# Altium schematic symbol library BIBLIOTECA DE ESQUEMA.SchLib: 404 symbols (part 1 of 2)
Pins are listed as number, name and electrical type; pins without a type are passive.

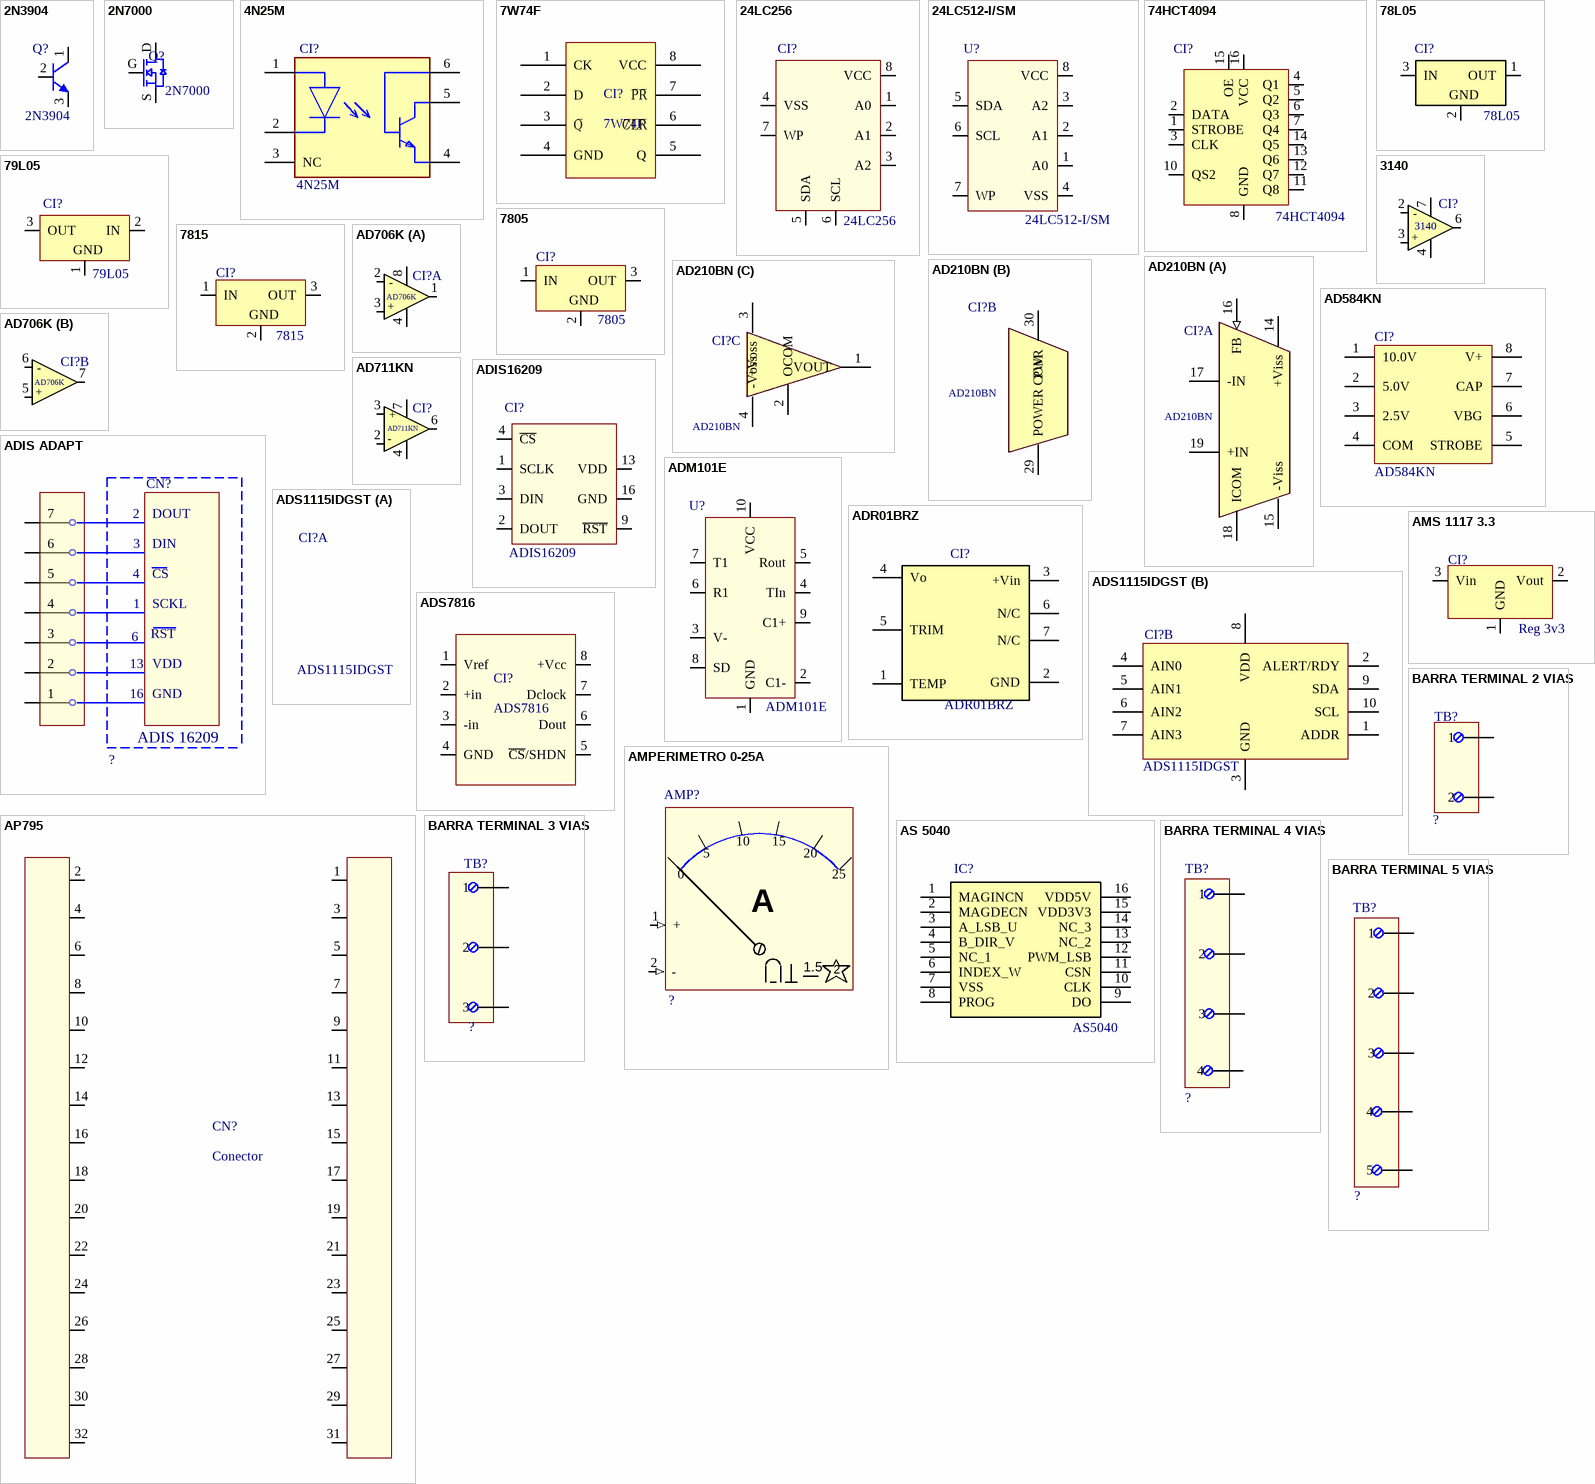
[diagram p0: symbols 2N3904 to BARRA TERMINAL 5 VIAS]

## 2N3904
designator Q?
TRANSISTOR NPN
footprint TO-92
footprint 2N7000-FET
pins: 1 C, 2 B, 3 E

## 2N7000
designator Q?
TRANSISTOR FET; Modelo: PTH
footprint TO-92 - DGS
pins: D, G, S

## 4N25M
designator CI?
ACOPLADOR OPTICO; isolador V: 7.5kV; Codigo: 512-4N25M; Value: *; Modelo: 4N25M
footprint DIP6 - 4N25M
pins: 1 A, 2 C, 3 NC, 4 E, 5 C, 6 B

## 7W74F
designator CI?
Flip Flop Tipo D
footprint 7W74F
pins: 1 CK, 2 D, 3 Q̅, 4 GND, 5 Q, 6 C̅L̅R̅, 7 P̅R̅, 8 VCC

## 24LC256
designator CI?
CMOS SERIAL EEPROM
footprint DIP8
pins: 1 A0, 2 A1, 3 A2, 4 VSS, 5 SDA, 6 SCL, 7 WP, 8 VCC

## 24LC512-I/SM
designator U?
SERIAL EEPROM 512K I2C
footprint SOIC/SOP
pins: 1 A0, 2 A1, 3 A2, 4 VSS, 5 SDA, 6 SCL, 7 WP, 8 VCC

## 74HCT4094
designator CI?
REGISTRADOR DE DESLOCAMENTO; Modelo: 74HCT4094
footprint DIP16
pins: 1 STROBE, 2 DATA, 3 CLK, 4 Q1, 5 Q2, 6 Q3, 7 Q4, 8 GND, 10 QS2, 11 Q8, 12 Q7, 13 Q6, 14 Q5, 15 OE, 16 VCC

## 78L05
designator CI?
REGULADOR DE TENSÃO LINEAR; Modelo: 78L05
footprint TO-92
pins: 1 OUT, 2 GND, 3 IN

## 79L05
designator CI?
REGULADOR DE TENSÃO LINEAR [NEGATIVO]; Modelo: 79L05
footprint 79L05
pins: 1 GND, 2 IN, 3 OUT

## 3140
designator CI?
AMPLIFICADOR OPERACIONAL
footprint DIP8
pins: 2, 3, 4, 6, 7
text: -; +

## 7805
designator CI?
Regulador de Tensão Positivo
footprint Dissipador - 7805
pins: 1 IN, 2 GND, 3 OUT

## 7815
designator CI?
Regulador de Tensão Positivo
footprint Dissipador - 7805
pins: 1 IN, 2 GND, 3 OUT

## AD210BN
designator CI?
IC OPAMP ISOLATION 1 CIRC 12DIP
footprint AD210BN
part A pins: 14 +Viss (power), 15 -Viss (power), 16 FB (in), 17 -IN (hiz), 18 ICOM, 19 +IN (hiz)
part B pins: 29 POWER COM (power), 30 PWR (power)
part C pins: 1 VOUT, 2 OCOM, 3 +Voss (power), 4 -Voss (power)

## AD584KN
designator CI?
REFERENCIA DE TENSÃO; Modelo: AD584KN
footprint DIP8
pins: 1 10.0V, 2 5.0V, 3 2.5V, 4 COM, 5 STROBE, 6 VBG, 7 CAP, 8 V+ (power)

## AD706K
designator CI?
AMPLIFICADOR OPERACIONAL
footprint DIP8
footprint SOIC 8
part A pins: 1, 2, 3, 4, 8
part B pins: 5, 6, 7
part A text: -; +
part B text: -; +

## AD711KN
designator CI?
AMPLIFICADOR OPERACIONAL
footprint DIP8
footprint SOIC 8
pins: 2, 3, 4, 6, 7
text: +; -

## ADIS16209
designator CI?
Inclinômetro
pins: 1 SCLK, 2 DOUT, 3 DIN, 4 ~{CS}, 9 ~{RST}, 13 VDD, 16 GND

## ADIS ADAPT
designator CN?, comment ?
PLACA DE ADAPTAÇÃO ?
pins: 1, 2, 3, 4, 5, 6, 7
text: DOUT; DIN; CS; SCKL; 9; RST; 13; VDD; 16; GND; ADIS 16209

## ADM101E
designator U?
TRANSCEIVER FOR PORTABLE
footprint MSOP-10
pins: 1 GND, 2 C1-, 3 V-, 4 TIn, 5 Rout, 6 R1, 7 T1, 8 SD, 9 C1+, 10 VCC

## ADR01BRZ
designator CI?
pins: 1 TEMP, 2 GND, 3 +Vin, 4 Vo, 5 TRIM, 6 N/C, 7 N/C

## ADS1115IDGST
designator CI?
MODULO ADS
part B pins: 1 ADDR, 2 ALERT/RDY, 3 GND, 4 AIN0, 5 AIN1, 6 AIN2, 7 AIN3, 8 VDD, 9 SDA, 10 SCL

## ADS7816
designator CI?
Conversor Analógico Digital
footprint DIP8
pins: 1 Vref, 2 +in, 3 -in, 4 GND, 5 ~{CS}/SHDN, 6 Dout, 7 Dclock, 8 +Vcc

## AMPERIMETRO 0-25A
designator AMP?, comment ?
AMPERIMETRO
pins: 1 + (in), 2 - (in)
text: 10; 15; 5; 20; 0; 25; A; 1.5

## AMS 1117 3.3
designator CI?, comment Reg 3v3
Regulador de tensão 3.3 Volts
footprint SOT223
pins: 1 GND, 2 Vout, 3 Vin

## AP795
designator CN?, comment Conector
Pinos LF4710
footprint AP795
pins: 1, 2, 3, 4, 5, 6, 7, 8, 9, 10, 11, 12, 13, 14, 15, 16, 17, 18, 19, 20, 21, 22, 23, 24, 25, 26, 27, 28, 29, 30, 31, 32

## AS 5040
designator IC?, comment AS5040
SENSOR MAGNETICO DE POSIÇÃO ROTACIONAL; Modelo: AS5040
pins: 1 MAGINCN, 2 MAGDECN, 3 A_LSB_U, 4 B_DIR_V, 5 NC_1, 6 INDEX_W, 7 VSS, 8 PROG, 9 DO, 10 CLK, 11 CSN, 12 PWM_LSB, 13 NC_2, 14 NC_3, 15 VDD3V3, 16 VDD5V

## BARRA TERMINAL 2 VIAS
designator TB?, comment ?
CONECTOR
pins: 1, 2

## BARRA TERMINAL 3 VIAS
designator ?, comment TB?
CONECTOR
pins: 1, 2, 3

## BARRA TERMINAL 4 VIAS
designator TB?, comment ?
CONECTOR
pins: 1, 2, 4 3, 4

## BARRA TERMINAL 5 VIAS
designator TB?, comment ?
CONECTOR
pins: 1, 2, 4 3, 4, 5

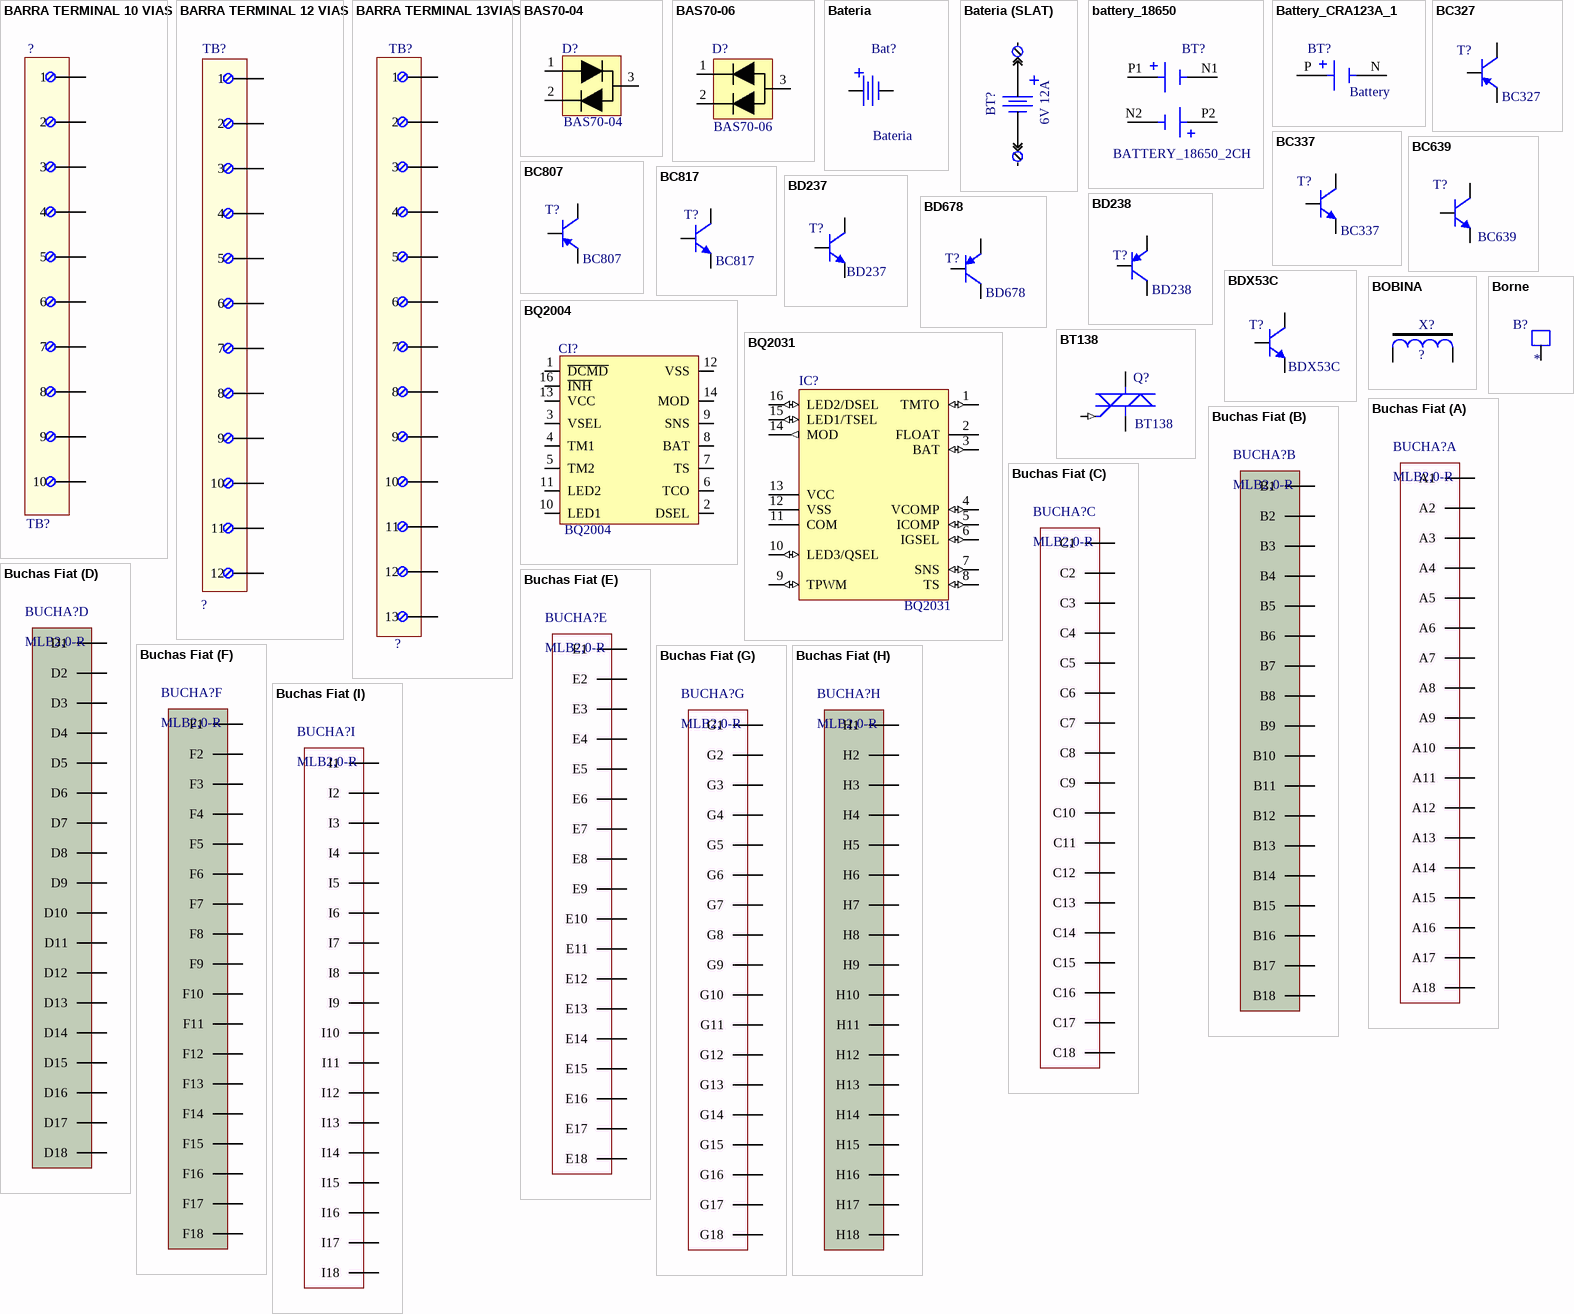
[diagram p1: symbols BARRA TERMINAL 10 VIAS to Buchas Fiat]

## BARRA TERMINAL 10 VIAS
designator TB?, comment ?
CONECTOR
pins: 1, 2, 3, 4, 5, 6, 7, 8, 9, 10

## BARRA TERMINAL 12 VIAS
designator TB?, comment ?
CONECTOR
pins: 1, 2, 3, 4, 5, 6, 7, 8, 9, 10, 11, 12

## BARRA TERMINAL 13VIAS
designator TB?, comment ?
CONECTOR
pins: 1, 2, 3, 4, 5, 6, 7, 8, 9, 10, 11, 12, 13

## BAS70-04
designator D?
DIODO SCHOTTKY [  COMUTAÇÃO RAPIDA DE DUPLA JUNÇÃO ]; Modelo: SMD BAS70-04; ENCAP: SOT-23
footprint SOT-23 (1N4148SMD/MMBD4148-TP/1N4148 SE)
footprint SOT-23 (RED PAD)
pins: 1, 2, 3

## BAS70-06
designator D?
DIODO SCHOTTKY [ COMUTAÇÃO RAPIDA]; Modelo: SMD BAS70-06; ENCAP: SOT-23
footprint SOT-23 (1N4148SMD/MMBD4148-TP/1N4148 SE)
footprint SOT-23 - 5 (RED PAD)
pins: 1, 2, 3

## Bateria
designator Bat?
footprint Soquet Bat
pins: 1 +, 2 -

## Bateria (SLAT)
designator BT?, comment 6V 12A
BATERIA
pins: 1 +, 2 -

## battery_18650
designator BT?, comment BATTERY_18650_2CH
footprint battery_18650_2ch
pins: N1, N2, P1, P2

## Battery_CRA123A_1
designator BT?, comment Battery
footprint Battery_cr123a_1
pins: N NEG, P POS

## BC327
designator T?
TRANSISTOR PNP
footprint TO-92
pins: 1 C, 2 B, 3 E

## BC337
designator T?
TRANSISTOR NPN
footprint TO-92
pins: 1 C, 2 B, 3 E

## BC639
designator T?
TRANSISTOR NPN
footprint TO-92
pins: 1 E, 2 C, 3 B

## BC807
designator T?
TRANSISTOR PNP; Modelo: SMD
footprint SOT-23
pins: 1 B, 2 E, 3 C

## BC817
designator T?
TRANSISTOR NPN; Modelo: SMD
footprint SOT-23
pins: 1 B, 2 E, 3 C

## BD237
designator T?
TRANSISTOR NPN; Modelo: PTH
footprint TO-225AA
pins: B, C, E

## BD238
designator T?
TRANSISTOR PNP; Modelo: PTH
footprint TO-126
pins: B, C, E

## BD678
designator T?
TRANSISTOR PNP; Modelo: PTH
footprint TO-126
pins: B, C, E

## BDX53C
designator T?
TRANSISTOR NPN; Modelo: PTH
footprint BDX53C
pins: B, C, E

## BOBINA
designator X?, comment ?
AJUDA
pins: 1, 2

## Borne
designator B?
CONECTOR
pins: 1

## BQ2004
designator CI?
Circuito Integrado
footprint SOIC NARROW
pins: 1 ~{DCMD}, 2 DSEL, 3 VSEL, 4 TM1, 5 TM2, 6 TCO, 7 TS, 8 BAT, 9 SNS, 10 LED1, 11 LED2, 12 VSS, 13 VCC, 14 MOD, 16 ~{INH}

## BQ2031
designator IC?
CONTROLADOR DE GERENCIAMENTO DE BATERIA; Modelo: BQ2031
footprint SOIC NARROW
pins: 1 TMTO (io) "This input sets the maximum charge time.The resistor and capacitor values are determined using equation 6. Figure 9 shows the resistor/capacitor connection.", 2 FLOAT (oc) "This open-drain output uses an external resistor divider network to control the BAT input voltage threshold (VFLT) for the float charge regulation. See Figure 1.", 3 BAT (io) "BAT is the battery voltage sense input. This potential is generally developed using a highimpedance resistor divider network connected between the positive and the negative terminals of the battery. See Figure 6 and equation (See Datasheet)", 4 VCOMP (io) "This input uses an external C or R-C network for voltage loop stability.", 5 ICOMP (io) "This input uses an external C or R-C network for current loop stability.", 6 IGSEL (io) "This three-state input is used to set IMIN for fast charge termination in the Two-Step Voltage algorithm and for maintenance current regulation in the Two-Step Current algorithm.See Tables 3 and 4.", 7 SNS (io) "Battery current is sensed via the voltage developed on this pin by an external sense resistor,RSNS, connected in series with the low side of the battery. See equation 8.", 8 TS (io) "This input is for an external battery temperature monitoring thermistor or probe. An external resistor divider network sets the lower and upper temperature thresholds.See Figures 7 and 8 and equations 4 and 5.", 9 TPWM (io) "This input uses an external timing capacitor to ground the pulse-width modulation (PWM) frequency. See equation 9.", 10 LED3/QSEL (io) "These charger status output drivers are for the direct drive of the LED display. Display modes are shown in Table 2. These outputs are tri-stated during initialization so that QSEL,TSEL, and DSEL can be read./With QSEL, (See Datasheet)", 11 COM (hiz) "Common output for LED1-3. This output is in a high-impedance state during initialization to read program inputs on TSEL,QSEL, and DSEL.", 12 VSS (power) "Ground", 13 VCC (power) "5.0V, +/- 10% power", 14 MOD (out) "MOD is a pulse-width modulated push/pull output that is used to control the charging current to the battery. MOD switches high to enable current flow and low to inhibit current flow.", 15 LED1/TSEL (io) "These charger status output drivers are for the direct drive of the LED display. Display modes are shown in Table 2. These outputs are tri-stated during initialization so that QSEL,TSEL, and DSEL can be read./With TSEL, (See Datasheet)", 16 LED2/DSEL (io) "These charger status output drivers are for the direct drive of the LED display. Display modes are shown in Table 2. These outputs are tri-stated during initialization so that QSEL,TSEL, and DSEL can be read./This (See Datasheet)"

## BT138
designator Q?
TRIAC; Modelo: BT138 600E
footprint TO-220-3 Deit
pins: 1 MT1, 2 MT2, 3 GATE (in)

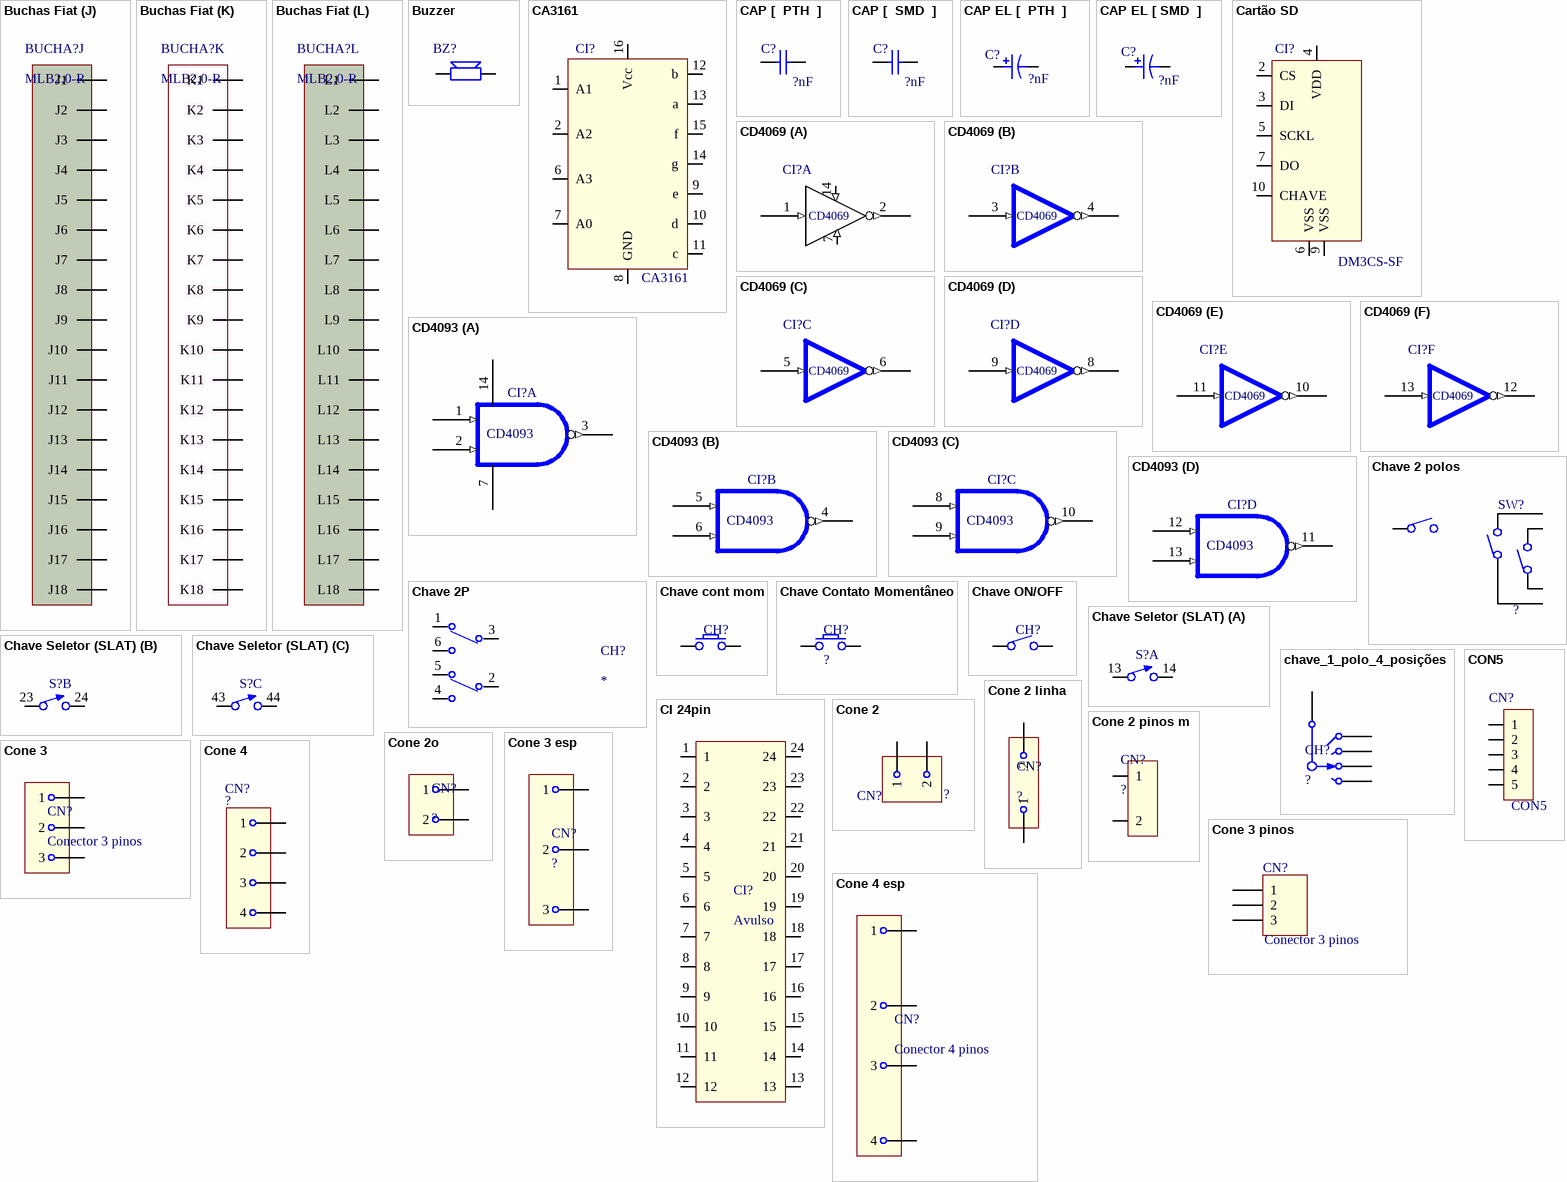
[diagram p2: symbols Buchas Fiat to Cone 4 esp]

## Buchas Fiat
designator BUCHA?, comment MLB2,0-R
CONECTOR
part A pins: A1, A2, A3, A4, A5, A6, A7, A8, A9, A10, A11, A12, A13, A14, A15, A16, A17, A18
part B pins: B1, B2, B3, B4, B5, B6, B7, B8, B9, B10, B11, B12, B13, B14, B15, B16, B17, B18
part C pins: C1, C2, C3, C4, C5, C6, C7, C8, C9, C10, C11, C12, C13, C14, C15, C16, C17, C18
part D pins: D1, D2, D3, D4, D5, D6, D7, D8, D9, D10, D11, D12, D13, D14, D15, D16, D17, D18
part E pins: E1, E2, E3, E4, E5, E6, E7, E8, E9, E10, E11, E12, E13, E14, E15, E16, E17, E18
part F pins: F1, F2, F3, F4, F5, F6, F7, F8, F9, F10, F11, F12, F13, F14, F15, F16, F17, F18
part G pins: G1, G2, G3, G4, G5, G6, G7, G8, G9, G10, G11, G12, G13, G14, G15, G16, G17, G18
part H pins: H1, H2, H3, H4, H5, H6, H7, H8, H9, H10, H11, H12, H13, H14, H15, H16, H17, H18
part I pins: I1, I2, I3, I4, I5, I6, I7, I8, I9, I10, I11, I12, I13, I14, I15, I16, I17, I18
part J pins: J1, J2, J3, J4, J5, J6, J7, J8, J9, J10, J11, J12, J13, J14, J15, J16, J17, J18
part K pins: K1, K2, K3, K4, K5, K6, K7, K8, K9, K10, K11, K12, K13, K14, K15, K16, K17, K18
part L pins: L1, L2, L3, L4, L5, L6, L7, L8, L9, L10, L11, L12, L13, L14, L15, L16, L17, L18

## Buzzer
designator BZ?, comment ?  (value not drawn)
Buzina
footprint Buzzer SM 5V C (Digilectron)
pins: 1, 2

## CA3161
designator CI?
DECODIFICADOR DE 7 SEGMENTOS
footprint DIP16
pins: 1 A1, 2 A2, 6 A3, 7 A0, 8 GND, 9 e, 10 d, 11 c, 12 b, 13 a, 14 g, 15 f, 16 Vcc

## CAP [  PTH  ]
designator C?, comment value ?nF  (hidden comment: ?nF-50V)
CAPACITOR CERÂMICO                                                                                                                                                                                      CAPACITOR POLIESTER                                                                                        CAPACITOR POLIESTER CANECO; Modelo: PTH; Volts: 50V
footprint CAP CERAM 27MM L20
footprint CAP Poli Caneca 0.1uF
footprint CAP POLI 27MM L23 [ DEITADO ]
footprint CAP POLI 26.3MM L10
footprint CAP POLI 22.8MM L17
footprint CAP POLI 10.5MM L9.5
footprint Cap Poli 5.08MM L5.5
footprint Cap poli 5.08MM L7.5
footprint CAP CERAM 27MM L20
footprint CAP CERAM 15.5MM L12
footprint CAP CERAM 15MM L17.8
footprint CAP CERAM 10MM L10
footprint CAP CERAM 5.08MM L8
footprint CAP CERAM 5.08MM L7.7
pins: A, B

## CAP [  SMD  ]
designator C?, comment value ?nF  (hidden comment: ?nF-50V)
CAPACITOR CERÂMICO                                                                                                                                                                                      CAPACITOR POLIESTER                                                                                        CAPACITOR POLIESTER CANECO; Modelo: SMD; Volts: 50V
footprint CAP 2512
footprint CAP 1206
footprint CAP 0805
pins: 1 A, 2 B

## CAP EL [  PTH  ]
designator C?, comment value ?nF  (hidden comment: ?nF-50V)
CAPACITOR ELETROLÍTICO; Volts: 50V; Modelo: PTH
footprint CAP EL 2mm L10 D6
footprint CAP EL 2mm L11.5 D5
footprint Cap El 3mm L15 D7
footprint CAP EL 3mm L15 D8
footprint CAP EL 4mm L14.5 D8
footprint CAP EL 4mm L14.5 D10
footprint CAP EL 5mm L10 D10
footprint CAP EL 5mm L20 D12
footprint CAP EL 5mm L20  D12 - DEITADO
footprint CAP EL 7MM L25.5 D17
footprint CAP EL 7.5MM L35 D18
pins: 1, 2

## CAP EL [ SMD  ]
designator C?, comment value ?nF  (hidden comment: ?nF-50V)
CAPACITOR ELETROLÍTICO; Modelo: SMD *; Volts: 50V; ENCAP: *
footprint CAP EL SMD 12.5MM L16.5 D16
footprint CAP EL SMD 5.8MM D6.3
footprint CAP EL SMD  5.5MM L6.2 D8
footprint CAP EL SMD 5MM L5.5 D6
footprint CAP EL SMD 4.5MM L7.7 D6.3
footprint CAP EL SMD 4MM L5.8 D4
footprint CAP EL SMD 12.7mm D10
pins: 1, 2

## Cartão SD
designator CI?, comment DM3CS-SF
Soquete para cartão MicroSD DM3CS-SF
pins: 2 CS, 3 DI, 4 VDD, 5 SCKL, 6 VSS, 7 DO, 9 VSS, 10 CHAVE

## CD4069
designator CI?
HEX INVERTER CMOS; Modelo: CD4069
footprint DIP14
part A pins: 1 I (in), 2 O (out), 7 I (in), 14 I (in)
part B pins: 3 I (in), 4 O (out)
part C pins: 5 I (in), 6 O (out)
part D pins: 8 O (out), 9 I (in)
part E pins: 10 O (out), 11 I (in)
part F pins: 12 O (out), 13 I (in)

## CD4093
designator CI?
INVERSOSR LOGICO; Modelo: CD4093
footprint DIP14
part A pins: 1 I0 (in), 2 I1 (in), 3 O (out), 7 GND (power), 14 VDD (power)
part B pins: 4 O (out), 5 I0 (in), 6 I1 (in)
part C pins: 8 I0 (in), 9 I1 (in), 10 O (out)
part D pins: 11 O (out), 12 I0 (in), 13 I1 (in)

## Chave 2 polos
designator SW?, comment ?
AJUDA
pins: 1, 1, 2, 2

## Chave 2P
designator CH?
AJUDA
pins: 1, 2, 3, 4, 5, 6

## Chave cont mom
designator CH?, comment Chave  (value not drawn)
Chave de contato momentâneo
footprint Chave 3FTL6
pins: 1, 2

## Chave Contato Momentâneo
designator CH?, comment ?
Chave
footprint Chave p/ DI121264
pins: 1, 2

## Chave ON/OFF
designator CH?, comment ?  (value not drawn)
Chave ON/OFF
pins: 1, 2

## Chave Seletor (SLAT)
designator S?  (value not drawn)
AJUDA
part A pins: 13, 14
part B pins: 23, 24
part C pins: 43, 44

## chave_1_polo_4_posições
designator CH?, comment ?
AJUDA
pins: 0, 1, 2, 3, C

## CI 24pin
designator CI?, comment Avulso
AJUDA
pins: 1, 2, 3, 4, 5, 6, 7, 8, 9, 10, 11, 12, 13, 14, 15, 16, 17, 18, 19, 20, 21, 22, 23, 24

## CON5
designator CN?
CONECTOR
pins: 1, 2, 3, 4, 5

## Cone 2
designator CN?, comment ?
CONECTOR
footprint Cone MCV1.5-3.81 2P 180ï¿½
pins: 1, 2

## Cone 2 linha
designator CN?, comment ?
CONECTOR
pins: 1, 2

## Cone 2 pinos m
designator CN?, comment ?
CONECTOR
pins: 1, 2

## Cone 2o
designator CN?, comment ?
CONECTOR
pins: 1, 2

## Cone 3
designator CN?, comment Conector 3 pinos
CONECTOR
pins: 1, 2, 3

## Cone 3 esp
designator CN?, comment ?
CONECTOR
pins: 1, 2, 3

## Cone 3 pinos
designator CN?, comment Conector 3 pinos
CONECTOR
pins: 1, 2, 3

## Cone 4
designator CN?, comment ?
CONECTOR
pins: 1, 2, 3, 4

## Cone 4 esp
designator CN?, comment Conector 4 pinos
CONECTOR
pins: 1, 2, 3, 4

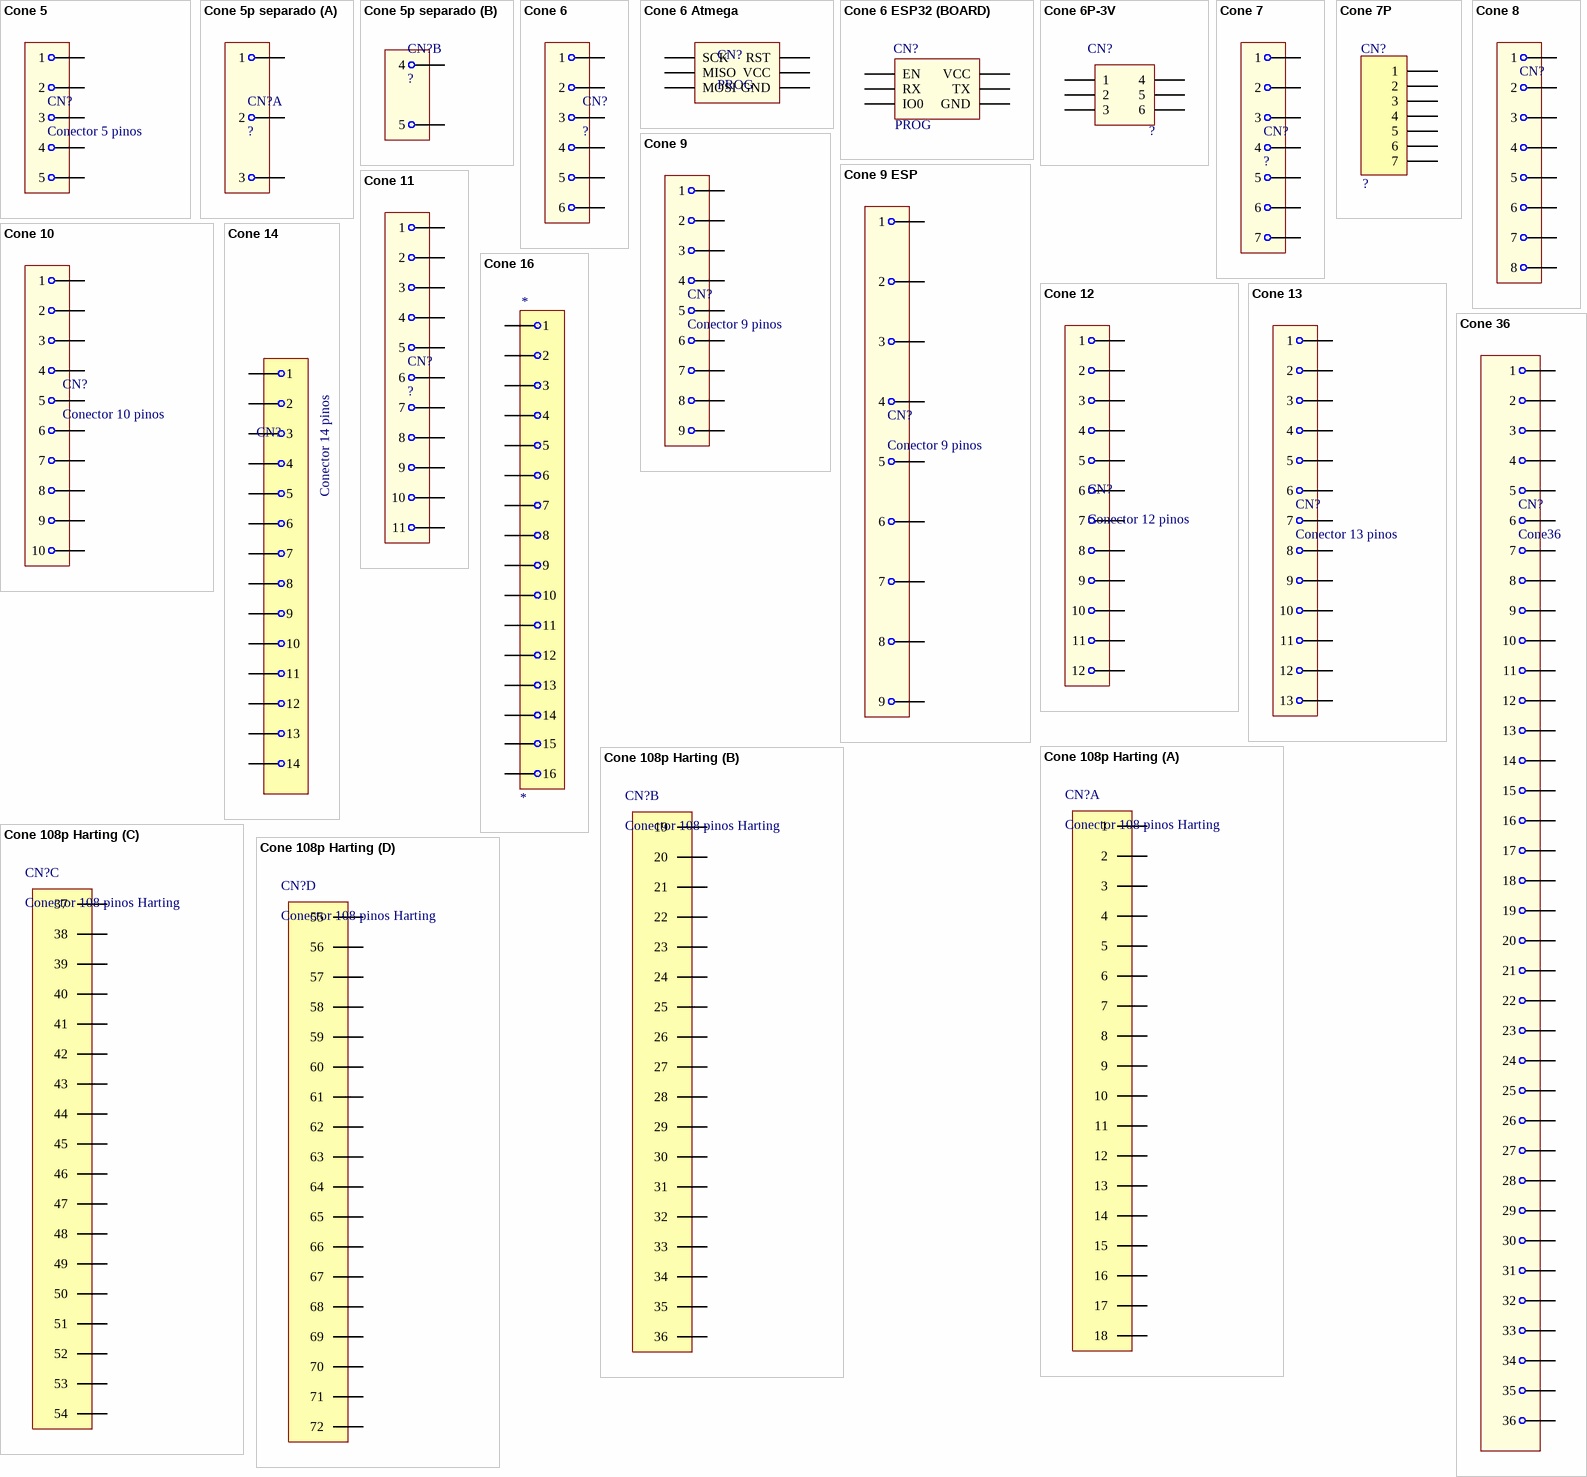
[diagram p3: symbols Cone 5 to Cone 108p Harting]

## Cone 5
designator CN?, comment Conector 5 pinos
CONECTOR
pins: 1, 2, 3, 4, 5

## Cone 5p separado
designator CN?, comment ?
CONECTOR
part A pins: 1, 2, 3
part B pins: 4, 5

## Cone 6
designator CN?, comment ?
CONECTOR
pins: 1, 2, 3, 4, 5, 6

## Cone 6 Atmega
designator CN?, comment PROG
Pinos de Programação ATMEGA
footprint Barra Prog Atmega
pins: GND, MISO, MOSI, RST, SCK, VCC

## Cone 6 ESP32 (BOARD)
designator CN?, comment PROG
Pinos de Programação ESP32
footprint Barra Prog ESP32 (BOARD)
pins: EN, GND, IO0, RX, TX, VCC

## Cone 6P-3V
designator CN?, comment ?
CONECTOR
pins: 1, 2, 3, 4, 5, 6

## Cone 7
designator CN?, comment ?
CONECTOR
pins: 1, 2, 3, 4, 5, 6, 7

## Cone 7P
designator CN?, comment ?
CONECTOR
pins: 1, 2, 3, 4, 5, 6, 7

## Cone 8
designator CN?, comment ?  (value not drawn)
CONECTOR
footprint Barra 8 Pinos
pins: 1, 2, 3, 4, 5, 6, 7, 8

## Cone 9
designator CN?, comment Conector 9 pinos
CONECTOR
pins: 1, 2, 3, 4, 5, 6, 7, 8, 9

## Cone 9 ESP
designator CN?, comment Conector 9 pinos
CONECTOR
pins: 1, 2, 3, 4, 5, 6, 7, 8, 9

## Cone 10
designator CN?, comment Conector 10 pinos
CONECTOR
pins: 1, 2, 3, 4, 5, 6, 7, 8, 9, 10

## Cone 11
designator CN?, comment ?
CONECTOR
pins: 1, 2, 3, 4, 5, 6, 7, 8, 9, 10, 11

## Cone 12
designator CN?, comment Conector 12 pinos
CONECTOR
pins: 1, 2, 3, 4, 5, 6, 7, 8, 9, 10, 11, 12

## Cone 13
designator CN?, comment Conector 13 pinos
CONECTOR
pins: 1, 2, 3, 4, 5, 6, 7, 8, 9, 10, 11, 12, 13

## Cone 14
designator CN?, comment Conector 14 pinos
CONECTOR
pins: 1, 2, 3, 4, 5, 6, 7, 8, 9, 10, 11, 12, 13, 14

## Cone 16
designator *
CONECTOR
pins: 1, 2, 3, 4, 5, 6, 7, 8, 9, 10, 11, 12, 13, 14, 15, 16

## Cone 36
designator CN?, comment Cone36
CONECTOR
pins: 1, 2, 3, 4, 5, 6, 7, 8, 9, 10, 11, 12, 13, 14, 15, 16, 17, 18, 19, 20, 21, 22, 23, 24, 25, 26, 27, 28, 29, 30, 31, 32, 33, 34, 35, 36

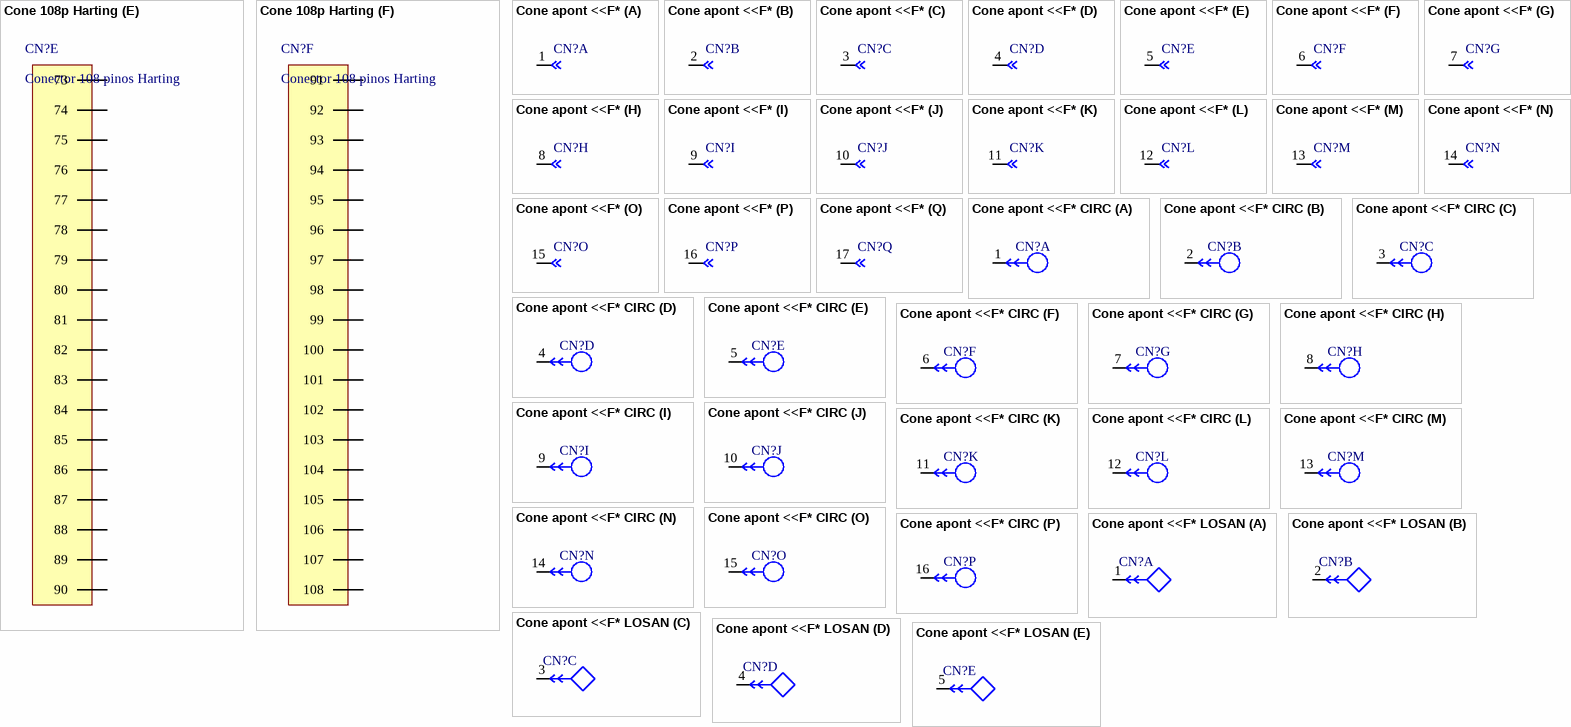
[diagram p4: symbols Cone 108p Harting to Cone apont <<F* LOSAN]

## Cone 108p Harting
designator CN?, comment Conector 108 pinos Harting
CONECTOR
part A pins: 1, 2, 3, 4, 5, 6, 7, 8, 9, 10, 11, 12, 13, 14, 15, 16, 17, 18
part B pins: 19, 20, 21, 22, 23, 24, 25, 26, 27, 28, 29, 30, 31, 32, 33, 34, 35, 36
part C pins: 37, 38, 39, 40, 41, 42, 43, 44, 45, 46, 47, 48, 49, 50, 51, 52, 53, 54
part D pins: 55, 56, 57, 58, 59, 60, 61, 62, 63, 64, 65, 66, 67, 68, 69, 70, 71, 72
part E pins: 73, 74, 75, 76, 77, 78, 79, 80, 81, 82, 83, 84, 85, 86, 87, 88, 89, 90
part F pins: 91, 92, 93, 94, 95, 96, 97, 98, 99, 100, 101, 102, 103, 104, 105, 106, 107, 108

## Cone apont <<F*
designator CN?, comment Conector  (value not drawn)
part A pins: 1
part B pins: 2
part C pins: 3
part D pins: 4
part E pins: 5
part F pins: 6
part G pins: 7
part H pins: 8
part I pins: 9
part J pins: 10
part K pins: 11
part L pins: 12
part M pins: 13
part N pins: 14
part O pins: 15
part P pins: 16
part Q pins: 17

## Cone apont <<F* CIRC
designator CN?, comment Conector  (value not drawn)
part A pins: 1
part B pins: 2
part C pins: 3
part D pins: 4
part E pins: 5
part F pins: 6
part G pins: 7
part H pins: 8
part I pins: 9
part J pins: 10
part K pins: 11
part L pins: 12
part M pins: 13
part N pins: 14
part O pins: 15
part P pins: 16

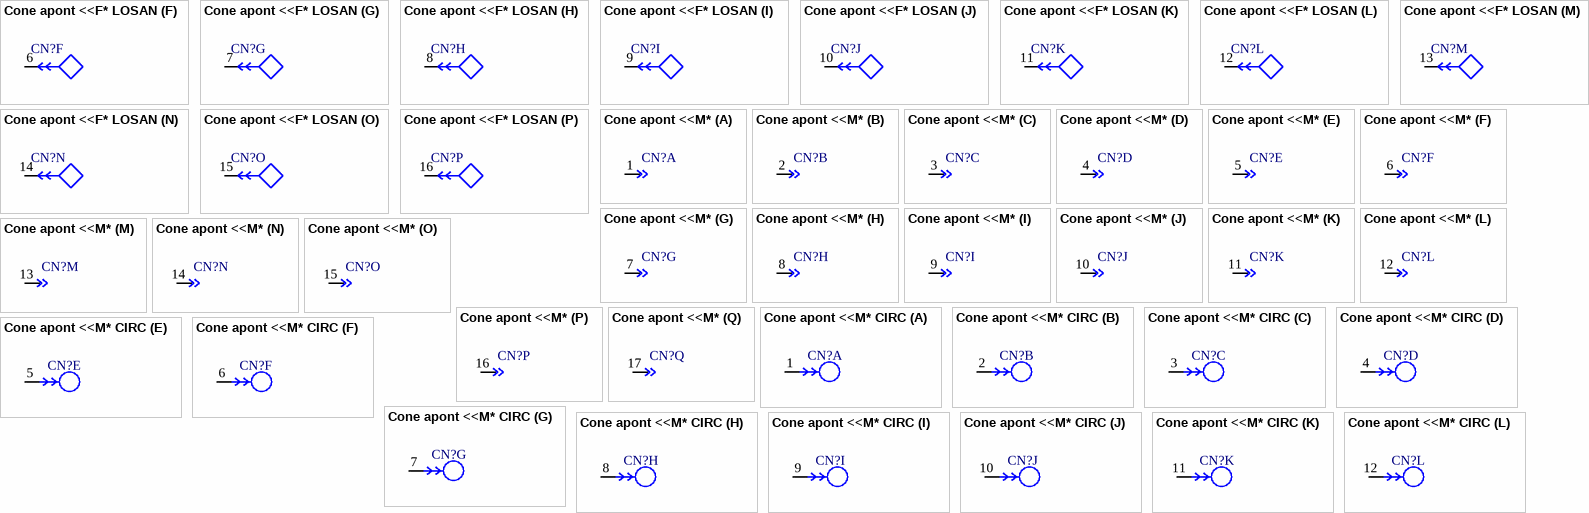
[diagram p5: symbols Cone apont <<F* LOSAN to Cone apont <<M* CIRC]

## Cone apont <<F* LOSAN
designator CN?, comment Conector  (value not drawn)
part A pins: 1
part B pins: 2
part C pins: 3
part D pins: 4
part E pins: 5
part F pins: 6
part G pins: 7
part H pins: 8
part I pins: 9
part J pins: 10
part K pins: 11
part L pins: 12
part M pins: 13
part N pins: 14
part O pins: 15
part P pins: 16

## Cone apont <<M*
designator CN?, comment Conector  (value not drawn)
part A pins: 1
part B pins: 2
part C pins: 3
part D pins: 4
part E pins: 5
part F pins: 6
part G pins: 7
part H pins: 8
part I pins: 9
part J pins: 10
part K pins: 11
part L pins: 12
part M pins: 13
part N pins: 14
part O pins: 15
part P pins: 16
part Q pins: 17

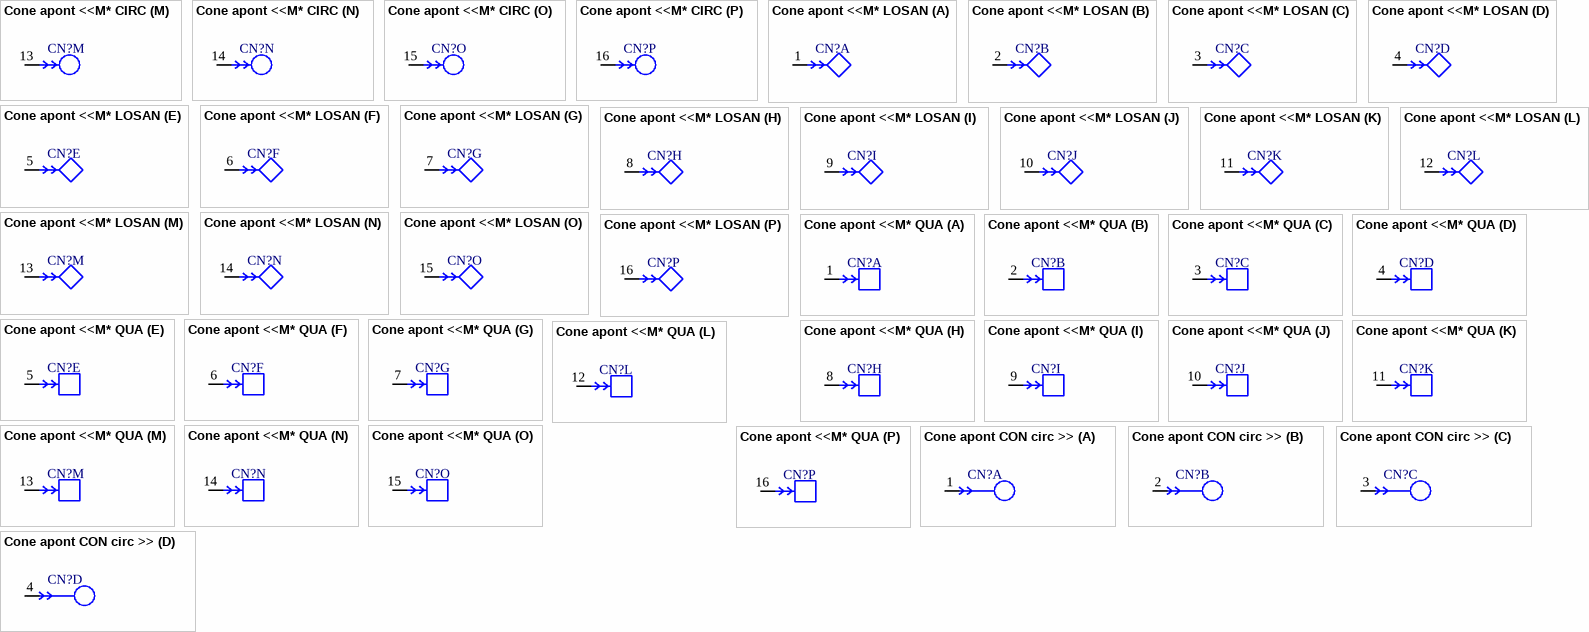
[diagram p6: symbols Cone apont <<M* CIRC to Cone apont CON circ >>]

## Cone apont <<M* CIRC
designator CN?, comment Conector  (value not drawn)
part A pins: 1
part B pins: 2
part C pins: 3
part D pins: 4
part E pins: 5
part F pins: 6
part G pins: 7
part H pins: 8
part I pins: 9
part J pins: 10
part K pins: 11
part L pins: 12
part M pins: 13
part N pins: 14
part O pins: 15
part P pins: 16

## Cone apont <<M* LOSAN
designator CN?, comment Conector  (value not drawn)
part A pins: 1
part B pins: 2
part C pins: 3
part D pins: 4
part E pins: 5
part F pins: 6
part G pins: 7
part H pins: 8
part I pins: 9
part J pins: 10
part K pins: 11
part L pins: 12
part M pins: 13
part N pins: 14
part O pins: 15
part P pins: 16

## Cone apont <<M* QUA
designator CN?, comment Conector  (value not drawn)
part A pins: 1
part B pins: 2
part C pins: 3
part D pins: 4
part E pins: 5
part F pins: 6
part G pins: 7
part H pins: 8
part I pins: 9
part J pins: 10
part K pins: 11
part L pins: 12
part M pins: 13
part N pins: 14
part O pins: 15
part P pins: 16

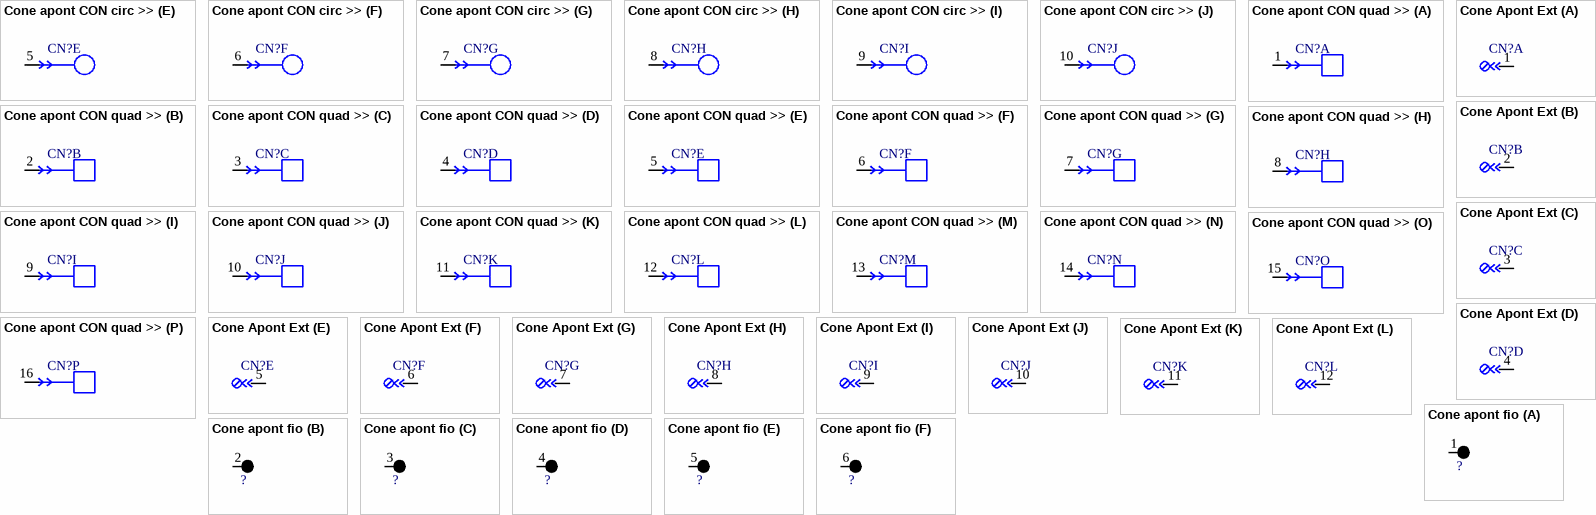
[diagram p7: symbols Cone apont CON circ >> to Cone apont fio]

## Cone apont CON circ >>
designator CN?, comment Conector  (value not drawn)
part A pins: 1
part B pins: 2
part C pins: 3
part D pins: 4
part E pins: 5
part F pins: 6
part G pins: 7
part H pins: 8
part I pins: 9
part J pins: 10

## Cone apont CON quad >>
designator CN?, comment Conector  (value not drawn)
part A pins: 1
part B pins: 2
part C pins: 3
part D pins: 4
part E pins: 5
part F pins: 6
part G pins: 7
part H pins: 8
part I pins: 9
part J pins: 10
part K pins: 11
part L pins: 12
part M pins: 13
part N pins: 14
part O pins: 15
part P pins: 16

## Cone Apont Ext
designator CN?
CONECTOR
part A pins: 1 A
part B pins: 2 B
part C pins: 3 C
part D pins: 4 D
part E pins: 5 E
part F pins: 6 F
part G pins: 7 G
part H pins: 8 H
part I pins: 9 I
part J pins: 10 J
part K pins: 11 K
part L pins: 12 L

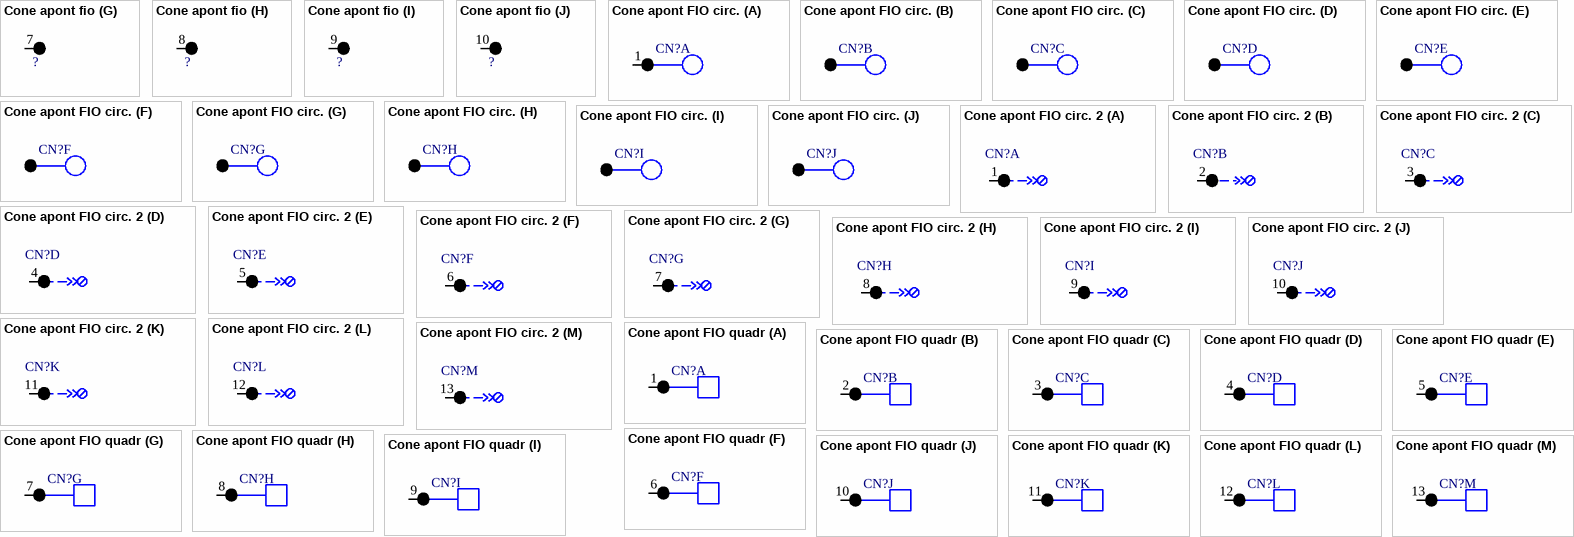
[diagram p8: symbols Cone apont fio to Cone apont FIO quadr]

## Cone apont fio
designator Alimentação, comment ?
CONECTOR
part A pins: 1
part B pins: 2
part C pins: 3
part D pins: 4
part E pins: 5
part F pins: 6
part G pins: 7
part H pins: 8
part I pins: 9
part J pins: 10

## Cone apont FIO circ.
designator CN?, comment Conector  (value not drawn)
part A pins: 1, 2, 3, 4, 5, 6, 7, 8, 9, 10

## Cone apont FIO circ. 2
designator CN?, comment Conector  (value not drawn)
part A pins: 1
part B pins: 2
part C pins: 3
part D pins: 4
part E pins: 5
part F pins: 6
part G pins: 7
part H pins: 8
part I pins: 9
part J pins: 10
part K pins: 11
part L pins: 12
part M pins: 13

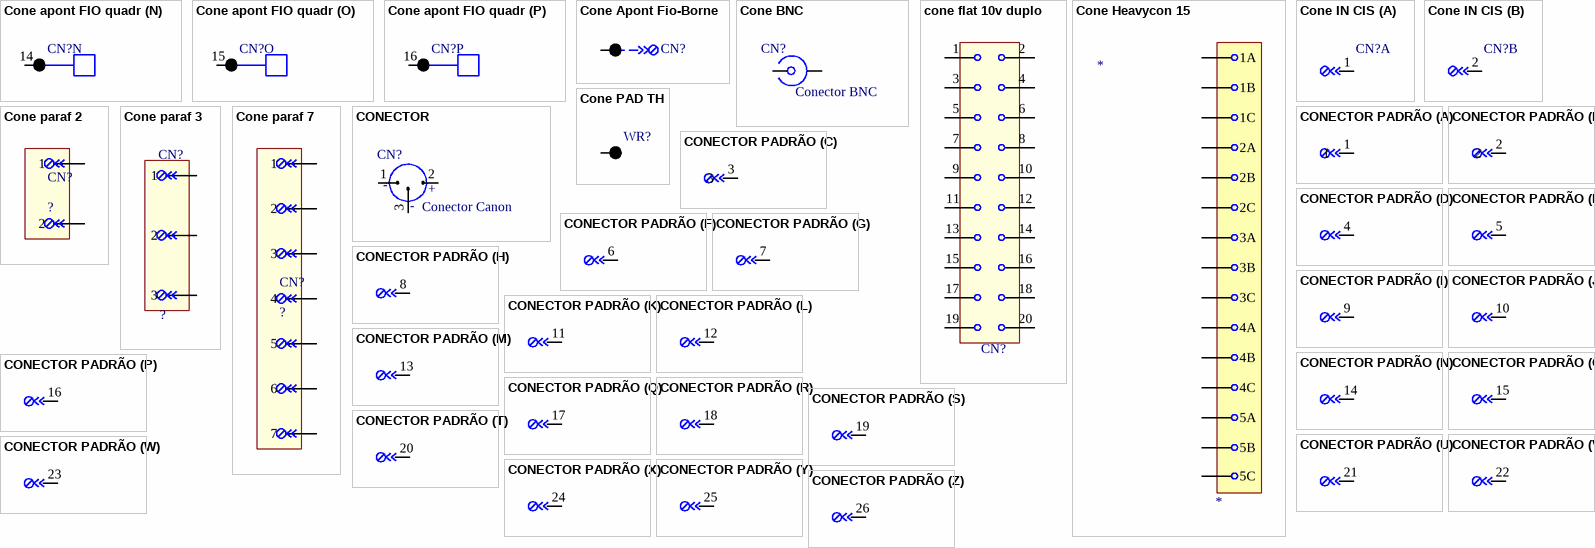
[diagram p9: symbols Cone apont FIO quadr to CONECTOR PADRÃO]

## Cone apont FIO quadr
designator CN?, comment Conector  (value not drawn)
part A pins: 1
part B pins: 2
part C pins: 3
part D pins: 4
part E pins: 5
part F pins: 6
part G pins: 7
part H pins: 8
part I pins: 9
part J pins: 10
part K pins: 11
part L pins: 12
part M pins: 13
part N pins: 14
part O pins: 15
part P pins: 16

## Cone Apont Fio-Borne
designator CN?  (value not drawn)
CONECTOR
pins: 1

## Cone BNC
designator CN?, comment Conector BNC
CONECTOR
pins: 1, 2

## cone flat 10v duplo
designator 1A, comment CN?
CONECTOR
pins: 1 1B, 2 1A, 3 2B, 4 2A, 5 3B, 6 3A, 7 4B, 8 4A, 9 5B, 10 5A, 11 6B, 12 6A, 13 7B, 14 7A, 15 8B, 16 8A, 17 9B, 18 9A, 19 10B, 20 10A

## Cone Heavycon 15
designator *
CONECTOR
pins: 1 1A, 2 1B, 3 1C, 4 2A, 5 2B, 6 2C, 7 3A, 8 3B, 9 3C, 10 4A, 11 4B, 12 4C, 13 5A, 14 5B, 15 5C

## Cone IN CIS
designator CN?  (value not drawn)
CONECTOR
footprint Cone IN CIS
part A pins: 1
part B pins: 2

## Cone PAD TH
designator WR?, comment Color  (value not drawn)
CONECTOR
pins: 1

## Cone paraf 2
designator CN?, comment ?
CONECTOR
pins: 1, 2

## Cone paraf 3
designator CN?, comment ?
CONECTOR
pins: 1, 2, 3

## Cone paraf 7
designator CN?, comment ?
CONECTOR
pins: 1, 2, 3, 4, 5, 6, 7

## CONECTOR
designator CN?, comment Conector Canon
Canon
pins: 1, 2, 3
text: -; +

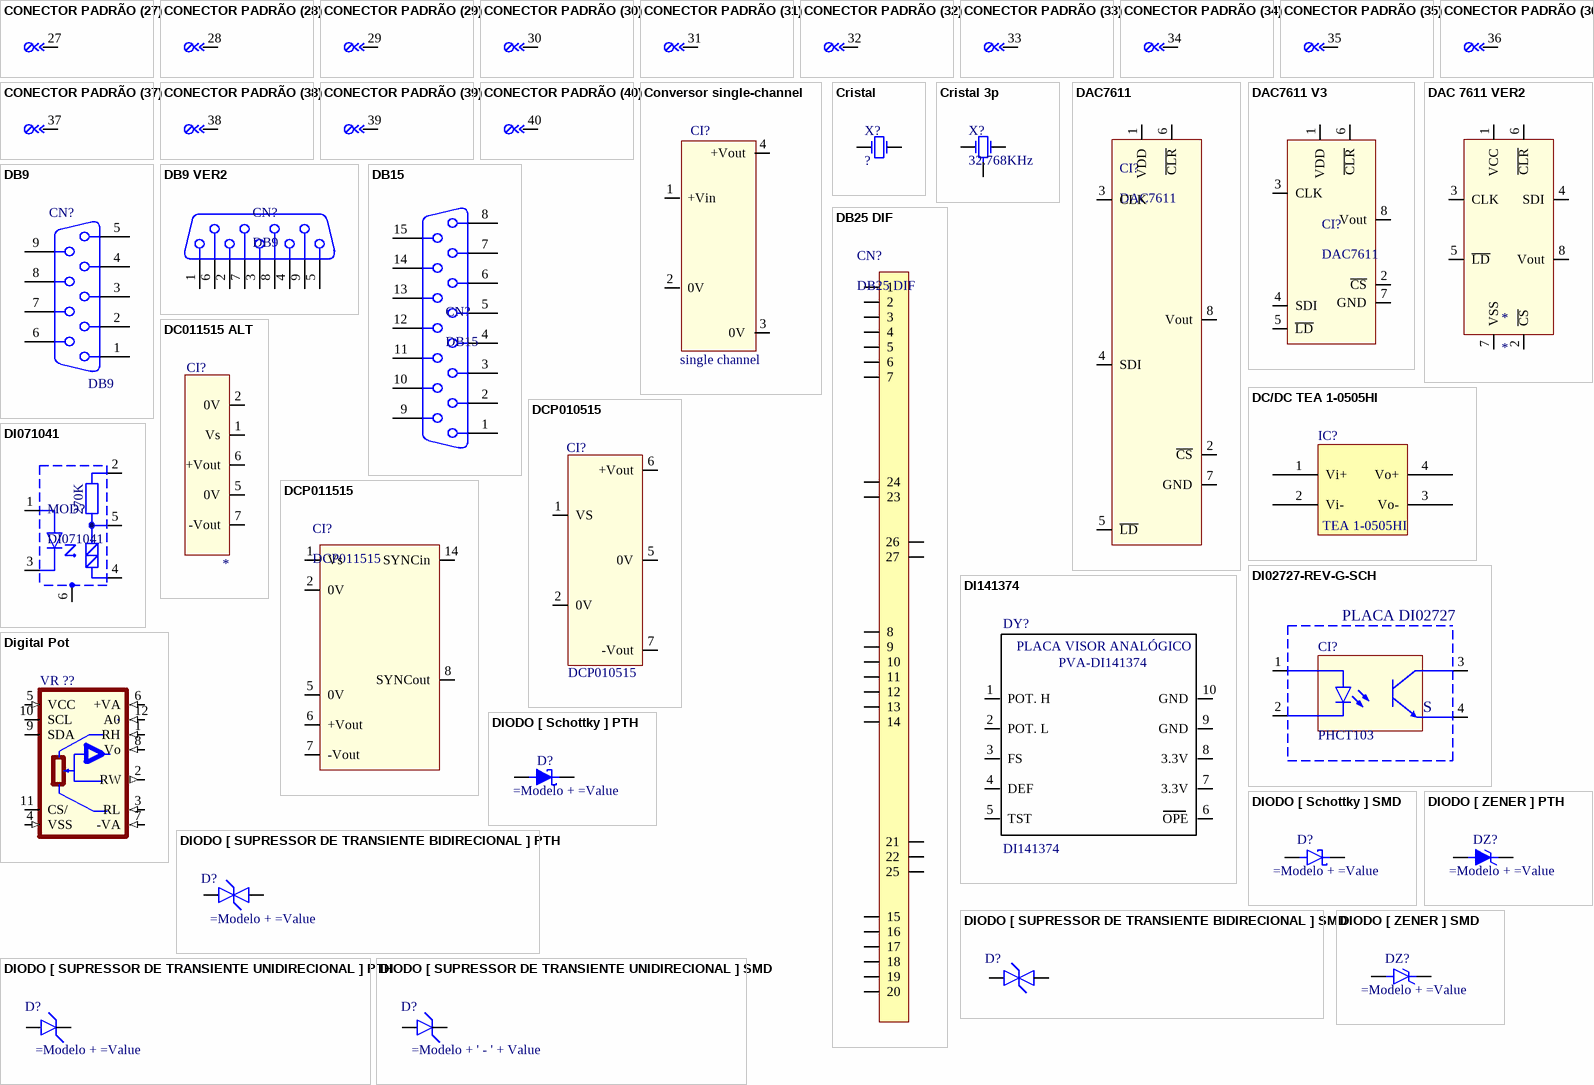
[diagram p10: symbols CONECTOR PADRÃO to DIODO [ ZENER ] SMD]

## CONECTOR PADRÃO
designator CN?, comment 34  (value not drawn)
CONECTOR
footprint cone MKDS 1,5/ 6-5,08
footprint KK 3.96 4p
footprint CONE MSTBH 2,5/ 2 GF
footprint CONECTOR LATCH 52 VIAS VERTICAL - 2 ROWS
footprint CONECTOR LATCH 52 VIAS HORIZONTAL - 2 ROWS
footprint CONECTOR HEADER 6 VIAS VERTICAL - 2 ROWS
footprint CONECTOR HEADER 16 VIAS VERTICAL - 2 ROWS
footprint Conector Latch 20 vias vertical -  2 ROWS
part A pins: 1
part B pins: 2
part C pins: 3
part D pins: 4
part E pins: 5
part F pins: 6
part G pins: 7
part H pins: 8
part I pins: 9
part J pins: 10
part K pins: 11
part L pins: 12
part M pins: 13
part N pins: 14
part O pins: 15
part P pins: 16
part Q pins: 17
part R pins: 18
part S pins: 19
part T pins: 20
part U pins: 21
part V pins: 22
part W pins: 23
part X pins: 24
part Y pins: 25
part Z pins: 26
part 27 pins: 27
part 28 pins: 28
part 29 pins: 29
part 30 pins: 30
part 31 pins: 31
part 32 pins: 32
part 33 pins: 33
part 34 pins: 34
part 35 pins: 35
part 36 pins: 36
part 37 pins: 37
part 38 pins: 38
part 39 pins: 39
part 40 pins: 40
part 41 pins: 41
part 42 pins: 42
part 43 pins: 43
part 44 pins: 44
part 45 pins: 45
part 46 pins: 46
part 47 pins: 47
part 48 pins: 48
part 49 pins: 49
part 50 pins: 50
part 51 pins: 51
part 52 pins: 52
part 53 pins: 53 52
part 54 pins: 54
part 55 pins: 55 52
part 56 pins: 56 55
part 57 pins: 57
part 58 pins: 58
part 59 pins: 59
part 60 pins: 60
part 61 pins: 61
part 62 pins: 62
part 63 pins: 63
part 64 pins: 64 4
part 65 pins: 65
part 66 pins: 66
part 67 pins: 68
part 68 pins: 67
part 69 pins: 69
part 70 pins: 70
part 71 pins: 71 69
part 72 pins: 72
part 73 pins: 73
part 74 pins: 74
part 75 pins: 75
part 76 pins: 76
part 77 pins: 77
part 78 pins: 78
part 79 pins: 79 78
part 80 pins: 80

## Conversor single-channel
designator CI?, comment single channel
pins: 1 +Vin, 2 0V, 3 0V, 4 +Vout

## Cristal
designator X?, comment ?
CRISTAL
footprint Cristal
pins: 1 OSC1, 2 OSC2

## Cristal 3p
designator X?, comment 32.768KHz
CRISTAL
footprint Cristal 2 deit
pins: 1 OSC1, 2 OSC2, 3 gnd

## DAC7611
designator CI?
Conversor digital Analógico
footprint DIP8
pins: 1 VDD, 2 ~{CS}, 3 CLK, 4 SDI, 5 ~{LD}, 6 ~{CLR}, 7 GND, 8 Vout

## DAC7611 V3
designator CI?, comment DAC7611
Conversor digital Analógico
footprint DIP8
pins: 1 VDD, 2 ~{CS}, 3 CLK, 4 SDI, 5 ~{LD}, 6 ~{CLR}, 7 GND, 8 Vout

## DAC 7611 VER2
designator *
AJUDA
footprint DIP8
pins: 1 VCC, 2 ~{CS}, 3 CLK, 4 SDI, 5 ~{LD}, 6 ~{CLR}, 7 VSS, 8 Vout

## DB9
designator CN?
Conector trapezoidal femea curto p/ PCI
footprint DB9 PCI
pins: 1, 2, 3, 4, 5, 6, 7, 8, 9

## DB9 VER2
designator CN?, comment DB9
Conector trapezoidal femea curto para PCI
footprint DB9 PCI
pins: 1, 2, 3, 4, 5, 6, 7, 8, 9

## DB15
designator CN?
CONECTOR
pins: 1, 2, 3, 4, 5, 6, 7, 8, 9, 10, 11, 12, 13, 14, 15

## DB25 DIF
designator CN?
CONECTOR
footprint DB25 FEMEA CURTO
footprint DB25 MACHO CURTO
pins: 1, 2, 3, 4, 5, 6, 7, 8, 9, 10, 11, 12, 13, 14, 15, 16, 17, 18, 19, 20, 21, 22, 23, 24, 25, 26, 27

## DC011515 ALT
designator CI?
AJUDA
footprint Dip 14 DCP01
pins: 1 Vs, 2 0V, 5 0V, 6 +Vout, 7 -Vout

## DC/DC TEA 1-0505HI
designator IC?, comment TEA 1-0505HI
CONVERSOR DC-DC; Modelo: TEA 1-0505HI
footprint TEA 1-0505HI
pins: 1 Vi+, 2 Vi-, 3 Vo-, 4 Vo+

## DCP010515
designator CI?
Conversor DC/DC
footprint Dip 14 DCP01
pins: 1 VS, 2 0V, 5 0V, 6 +Vout, 7 -Vout

## DCP011515
designator CI?
Conversor DC/DC
footprint Dip 14 DCP01
pins: 1 Vs, 2 0V, 5 0V, 6 +Vout, 7 -Vout, 8 SYNCout, 14 SYNCin

## DI02727-REV-G-SCH
designator CI?, comment PHCT103
Placa DI02727 Photologic Slotted Optical Switch
footprint DI02727-REV-G
pins: 1, 2, 3, 4
text: PLACA DI02727; S

## DI071041
designator MOD?
Placa Di-elétrons
footprint DI071041
pins: 1 A, 2 A, 3 K, 4 A, 5 A, 6 T
text: 270K

## DI141374
designator DY?
DISPLAY; Modelo: DI141374
pins: 1 POT. H, 2 POT. L, 3 FS, 4 DEF, 5 TST, 6 OPE, 7 3.3V, 8 3.3V, 9 GND, 10 GND
text: PLACA VISOR ANALÓGICO; PVA-DI141374

## Digital Pot
designator VR ??  (value not drawn)
AJUDA
footprint POTENCIOMETRO DIGITAL
pins: 1 RH (in), 2 RW (out), 3 RL (in), 4 VSS (in), 5 VCC (in), 6 +VA (in), 7 -VA (in), 8 Vo (in), 9 SDA (io), 10 SCL (io), 11 CS/, 12 A0 (in)

## DIODO [ Schottky ] PTH
designator D?
DIODO SCHOTTKY; Modelo: PTH *; Value: *; ENCAP: *
footprint DO-41
footprint DO-201AD-COMPACT
footprint DO-201AD
footprint DO-35 (1N753/1N751/1N755/1N4148)
footprint DO-15
footprint TO-220-2-DEIT (SLAT)
footprint DO-34
pins: 1 A, 2 K

## DIODO [ Schottky ] SMD
designator D?
DIODO SCHOTTKY; Modelo: SMD *; Value: *; ENCAP: *
footprint DO-214AC
footprint DO-214AB
footprint DO-214AA(SMB)
footprint DO-213AA
footprint SOD-123FL
pins: 1 A, 2 K

## DIODO [ SUPRESSOR DE TRANSIENTE BIDIRECIONAL ] PTH
designator D?
DIODO SUPRESSOR DE TRANSIENTE  BIDIRECIONAL; Modelo: PTH *; Value: *; ENCAP: *
pins: 1 A, 2 K

## DIODO [ SUPRESSOR DE TRANSIENTE BIDIRECIONAL ] SMD
designator D?
DIODO SUPRESSOR DE TRANSIENTE  BIDIRECIONAL; Modelo: SMD *; ENCAP: *
footprint SOD-323
footprint DO-214AB
pins: 1 A, 2 B

## DIODO [ SUPRESSOR DE TRANSIENTE UNIDIRECIONAL ] PTH
designator D?
DIODO SUPRESSOR DE TRANSIENTE UNIDIRECIONAL; Modelo: PTH *; Value: *; ENCAP: *
footprint DO-201AD (1N5822/1N5406)
footprint DO-201AD-COMPACT
footprint DO-201AD - duplicate
pins: 1 A, 2 K

## DIODO [ SUPRESSOR DE TRANSIENTE UNIDIRECIONAL ] SMD
designator D?
DIODO SUPRESSOR DE TRANSIENTE UNIDIRECIONAL; Modelo: SMD *; Value: *; ENCAP: *
footprint DO-213AA
footprint DO-214AA(SMB)
footprint DO-214AB
footprint DO-214AC
footprint SOD-323
pins: 1 A, 2 K

## DIODO [ ZENER ] PTH
designator DZ?
DIODO ZENER; Modelo: PTH *; Value: *; ENCAP: *
footprint DO-35 (1N753/1N751/1N755/1N4148)
footprint DO-41
footprint DO-201AD
footprint DO-15
footprint DO-201AD-COMPACT
pins: 1 A, 2 K

## DIODO [ ZENER ] SMD
designator DZ?
DIODO ZENER; Modelo: SMD *; Value: *; ENCAP: *
footprint DO-214AC
footprint DO-214AB
footprint DO-214AA(SMB)
footprint DO-213AA
footprint SOD-123FL
pins: 1 A, 2 K

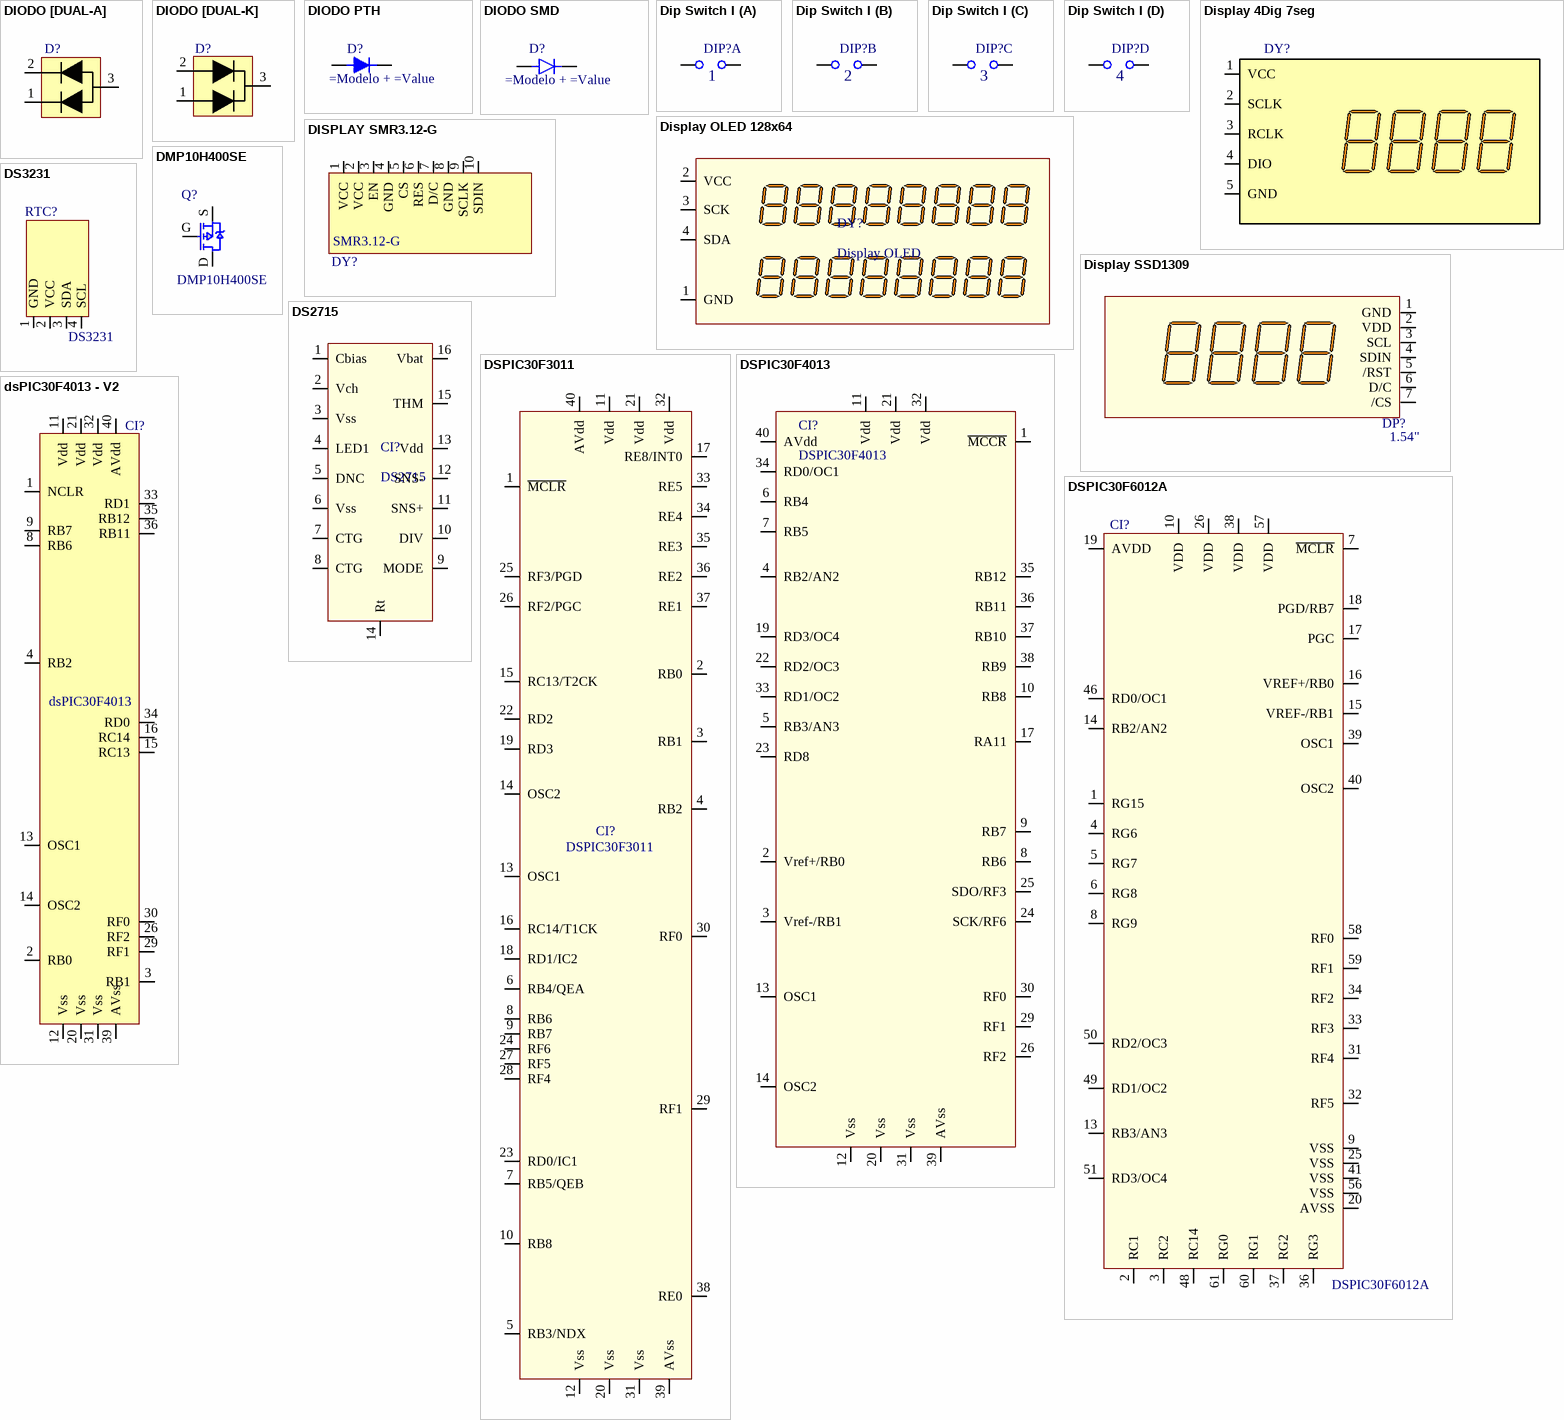
[diagram p11: symbols DIODO [DUAL-A] to DSPIC30F6012A]

## DIODO [DUAL-A]
designator D?
pins: 1, 2, 3

## DIODO [DUAL-K]
designator D?  (value not drawn)
pins: 1, 2, 3

## DIODO PTH
designator D?
DIODO DE SILICIO; Modelo: PTH *; Value: *; ENCAP: *
footprint DO-201AD-COMPACT
footprint DO-201AD
footprint DO-41
footprint DO-35 (1N753/1N751/1N755/1N4148)
footprint DO-15
footprint DO-201AD - duplicate
pins: A, K

## DIODO SMD
designator D?
DIODO DE SILICIO; Modelo: SMD *; Value: *; ENCAP: *
footprint DO-214AC
footprint DO-214AB
footprint DO-214AA(SMB)
footprint DO-213AA
footprint SOD-123FL
pins: 1 A, 2 K

## Dip Switch I
designator DIP?, comment DE 1 A 4  (value not drawn)
DIP SWITCH
footprint Dip Switch
part A pins: 1, 8
part B pins: 2, 7
part C pins: 3, 6
part D pins: 4, 5

## Display 4Dig 7seg
designator DY?
DISPLAY
footprint Modulo Display 4 Digitos (Módulo 74HC595 com Display 4 Digitos)
pins: 1 VCC, 2 SCLK, 3 RCLK, 4 DIO, 5 GND

## Display OLED 128x64
designator DY?, comment Display OLED
DISPLAY
pins: 1 GND, 2 VCC, 3 SCK, 4 SDA

## DISPLAY SMR3.12-G
designator DY?, comment SMR3.12-G
DISPLAY; Modelo: SMR3.12-G
pins: 1 VCC, 2 VCC, 3 EN, 4 GND, 5 CS, 6 RES, 7 D/C, 8 GND, 9 SCLK, 10 SDIN

## Display SSD1309
designator DP?, comment 1.54"
DISPLAY
pins: 1 GND "0V", 2 VDD "+3.3V", 3 SCL, 4 SDIN "Serial Data input", 5 /RST "Reset", 6 D/C "Slave Adress", 7 /CS "Chip Select"

## DMP10H400SE
designator Q?
TRANSISTOR MOSFET; Modelo: SMD; ENCAP: SOT223
footprint MOSFET SOT223
pins: D, G, S

## DS2715
designator CI?
Charge Controller NiMH Baterry Pack
footprint SO 16
pins: 1 Cbias, 2 Vch, 3 Vss, 4 LED1, 5 DNC, 6 Vss, 7 CTG, 8 CTG, 9 MODE, 10 DIV, 11 SNS+, 12 SNS-, 13 Vdd, 14 Rt, 15 THM, 16 Vbat

## DS3231
designator RTC?
MODULO DE RELOGIO; Modelo: DS3231
pins: 1 GND, 2 VCC, 3 SDA, 4 SCL

## DSPIC30F3011
designator CI?
MICROCONTROLADOR
footprint DIP40
pins: 1 ~{MCLR}, 2 RB0, 3 RB1, 4 RB2, 5 RB3/NDX, 6 RB4/QEA, 7 RB5/QEB, 8 RB6, 9 RB7, 10 RB8, 11 Vdd, 12 Vss, 13 OSC1, 14 OSC2, 15 RC13/T2CK, 16 RC14/T1CK, 17 RE8/INT0, 18 RD1/IC2, 19 RD3, 20 Vss, 21 Vdd, 22 RD2, 23 RD0/IC1, 24 RF6, 25 RF3/PGD, 26 RF2/PGC, 27 RF5, 28 RF4, 29 RF1, 30 RF0, 31 Vss, 32 Vdd, 33 RE5, 34 RE4, 35 RE3, 36 RE2, 37 RE1, 38 RE0, 39 AVss, 40 AVdd

## DSPIC30F4013
designator CI?
MICROCONTROLADOR; Modelo: DSPIC30F4013
footprint DIP40
pins: 1 ~{MCCR}, 2 Vref+/RB0, 3 Vref-/RB1, 4 RB2/AN2, 5 RB3/AN3, 6 RB4, 7 RB5, 8 RB6, 9 RB7, 10 RB8, 11 Vdd, 12 Vss, 13 OSC1, 14 OSC2, 17 RA11, 19 RD3/OC4, 20 Vss, 21 Vdd, 22 RD2/OC3, 23 RD8, 24 SCK/RF6, 25 SDO/RF3, 26 RF2, 29 RF1, 30 RF0, 31 Vss, 32 Vdd, 33 RD1/OC2, 34 RD0/OC1, 35 RB12, 36 RB11, 37 RB10, 38 RB9, 39 AVss, 40 AVdd

## dsPIC30F4013 - V2
designator CI?, comment dsPIC30F4013
MICROCONTROLADOR
pins: 1 NCLR, 2 RB0, 3 RB1, 4 RB2, 8 RB6, 9 RB7, 11 Vdd, 12 Vss, 13 OSC1, 14 OSC2, 15 RC13, 16 RC14, 20 Vss, 21 Vdd, 26 RF2, 29 RF1, 30 RF0, 31 Vss, 32 Vdd, 33 RD1, 34 RD0, 35 RB12, 36 RB11, 39 AVss, 40 AVdd

## DSPIC30F6012A
designator CI?
MICROCONTROLADOR; Modelo: DSPIC30F6012A
pins: 1 RG15, 2 RC1, 3 RC2, 4 RG6, 5 RG7, 6 RG8, 7 ~{MCLR}, 8 RG9, 9 VSS, 10 VDD, 13 RB3/AN3, 14 RB2/AN2, 15 VREF-/RB1, 16 VREF+/RB0, 17 PGC, 18 PGD/RB7, 19 AVDD, 20 AVSS, 25 VSS, 26 VDD, 31 RF4, 32 RF5, 33 RF3, 34 RF2, 36 RG3, 37 RG2, 38 VDD, 39 OSC1, 40 OSC2, 41 VSS, 46 RD0/OC1, 48 RC14, 49 RD1/OC2, 50 RD2/OC3, 51 RD3/OC4, 56 VSS, 57 VDD, 58 RF0, 59 RF1, 60 RG1, 61 RG0

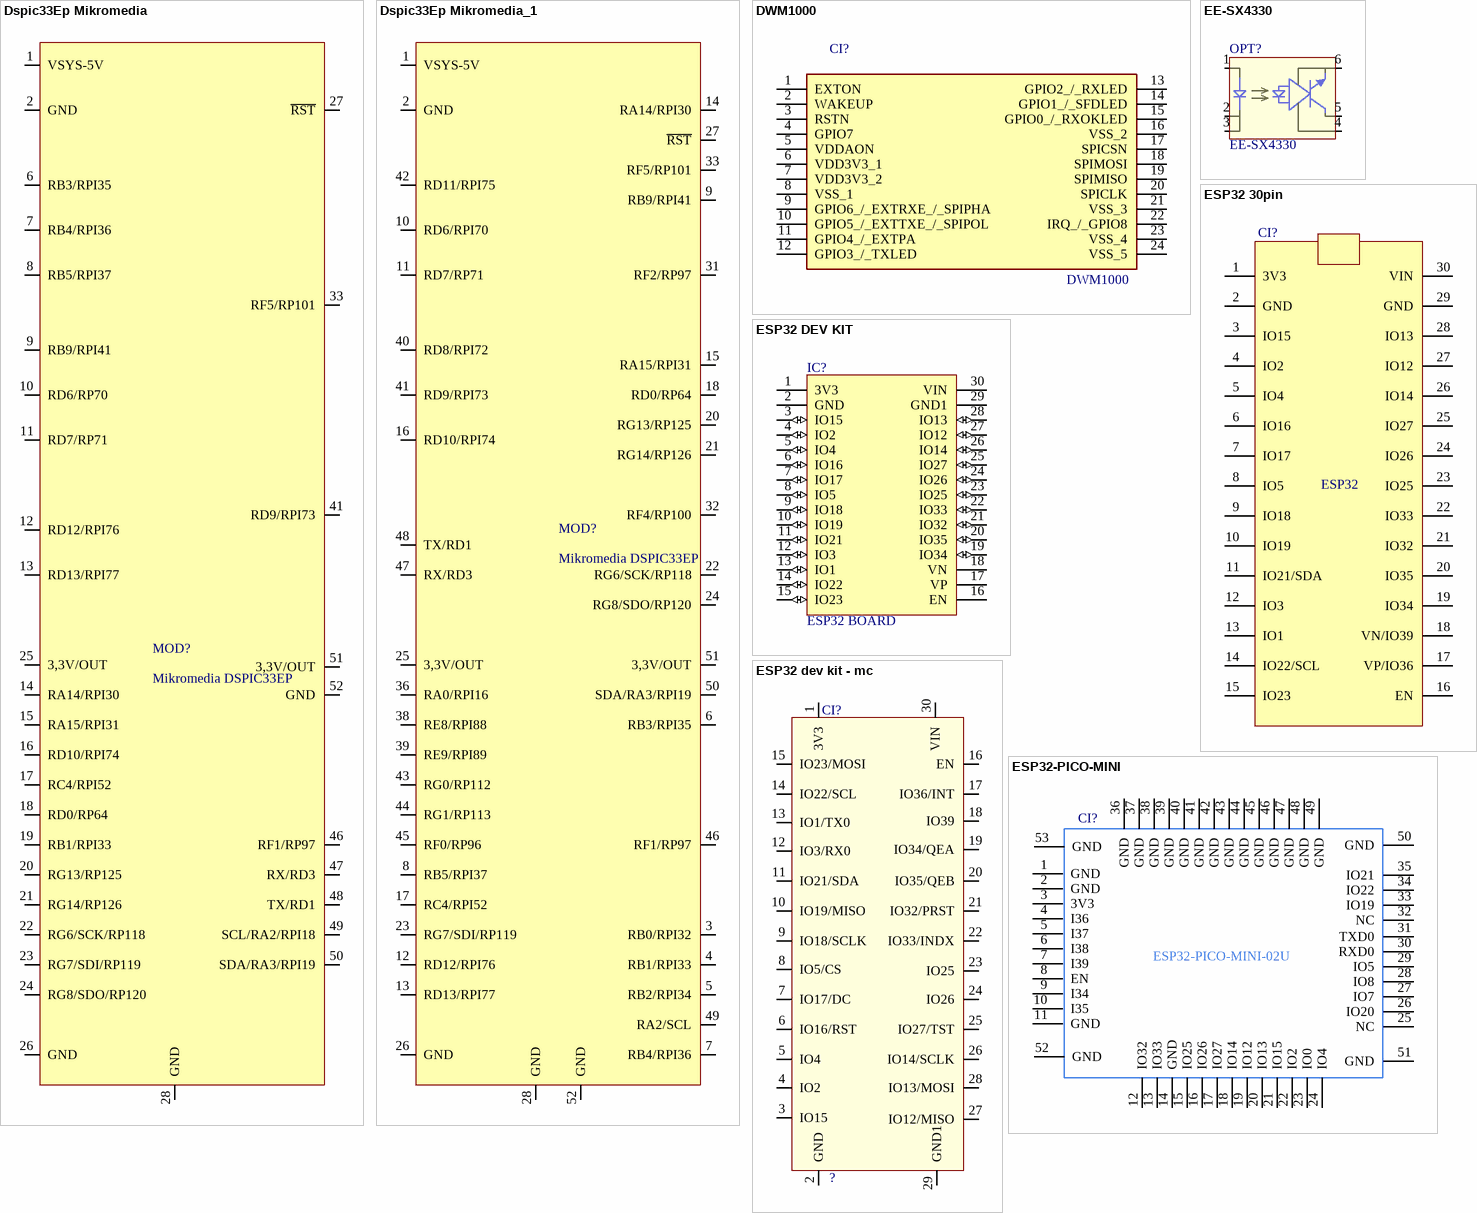
[diagram p12: symbols Dspic33Ep Mikromedia to ESP32-PICO-MINI]

## Dspic33Ep Mikromedia
designator MOD?, comment Mikromedia DSPIC33EP
Módulo Display Microcontrolado
footprint DSPIC33EP Mikromedia
pins: 1 VSYS-5V, 2 GND, 6 RB3/RPI35, 7 RB4/RPI36, 8 RB5/RPI37, 9 RB9/RPI41, 10 RD6/RP70, 11 RD7/RP71, 12 RD12/RPI76, 13 RD13/RPI77, 14 RA14/RPI30, 15 RA15/RPI31, 16 RD10/RPI74, 17 RC4/RPI52, 18 RD0/RP64, 19 RB1/RPI33, 20 RG13/RP125, 21 RG14/RP126, 22 RG6/SCK/RP118, 23 RG7/SDI/RP119, 24 RG8/SDO/RP120, 25 3,3V/OUT, 26 GND, 27 ~{RST}, 28 GND, 33 RF5/RP101, 41 RD9/RPI73, 46 RF1/RP97, 47 RX/RD3, 48 TX/RD1, 49 SCL/RA2/RPI18, 50 SDA/RA3/RPI19, 51 3,3V/OUT, 52 GND

## Dspic33Ep Mikromedia_1
designator MOD?, comment Mikromedia DSPIC33EP
Módulo Display Microcontrolado
footprint DSPIC33EP Mikromedia
pins: 1 VSYS-5V, 2 GND, 3 RB0/RPI32, 4 RB1/RPI33, 5 RB2/RPI34, 6 RB3/RPI35, 7 RB4/RPI36, 8 RB5/RPI37, 9 RB9/RPI41, 10 RD6/RPI70, 11 RD7/RP71, 12 RD12/RPI76, 13 RD13/RPI77, 14 RA14/RPI30, 15 RA15/RPI31, 16 RD10/RPI74, 17 RC4/RPI52, 18 RD0/RP64, 20 RG13/RP125, 21 RG14/RP126, 22 RG6/SCK/RP118, 23 RG7/SDI/RP119, 24 RG8/SDO/RP120, 25 3,3V/OUT, 26 GND, 27 ~{RST}, 28 GND, 31 RF2/RP97, 32 RF4/RP100, 33 RF5/RP101, 36 RA0/RPI16, 38 RE8/RPI88, 39 RE9/RPI89, 40 RD8/RPI72, 41 RD9/RPI73, 42 RD11/RPI75, 43 RG0/RP112, 44 RG1/RP113, 45 RF0/RP96, 46 RF1/RP97, 47 RX/RD3, 48 TX/RD1, 49 RA2/SCL, 50 SDA/RA3/RPI19, 51 3,3V/OUT, 52 GND

## DWM1000
designator CI?
pins: 1 EXTON, 2 WAKEUP, 3 RSTN, 4 GPIO7, 5 VDDAON, 6 VDD3V3_1, 7 VDD3V3_2, 8 VSS_1, 9 GPIO6_/_EXTRXE_/_SPIPHA, 10 GPIO5_/_EXTTXE_/_SPIPOL, 11 GPIO4_/_EXTPA, 12 GPIO3_/_TXLED, 13 GPIO2_/_RXLED, 14 GPIO1_/_SFDLED, 15 GPIO0_/_RXOKLED, 16 VSS_2, 17 SPICSN, 18 SPIMOSI, 19 SPIMISO, 20 SPICLK, 21 VSS_3, 22 IRQ_/_GPIO8, 23 VSS_4, 24 VSS_5

## EE-SX4330
designator OPT?
ACOPLADOR OPTICO
footprint EE-SX4330
pins: 1, 2, 3, 4, 5, 6

## ESP32 30pin
designator CI?, comment ESP32
MICROCONTROLADOR
footprint ESP32-DEVKITV1_BOARD
pins: 1 3V3, 2 GND, 3 IO15, 4 IO2, 5 IO4, 6 IO16, 7 IO17, 8 IO5, 9 IO18, 10 IO19, 11 IO21/SDA, 12 IO3, 13 IO1, 14 IO22/SCL, 15 IO23, 16 EN, 17 VP/IO36, 18 VN/IO39, 19 IO34, 20 IO35, 21 IO32, 22 IO33, 23 IO25, 24 IO26, 25 IO27, 26 IO14, 27 IO12, 28 IO13, 29 GND, 30 VIN

## ESP32 DEV KIT
designator IC?, comment ESP32 BOARD
MICROCONTROLADOR
footprint ESP32-DEVKITV1_BOARD
pins: 1 3V3, 2 GND, 3 IO15 (io), 4 IO2 (io), 5 IO4 (io), 6 IO16 (io), 7 IO17 (io), 8 IO5 (io), 9 IO18 (io), 10 IO19 (io), 11 IO21 (io), 12 IO3 (io), 13 IO1 (io), 14 IO22 (io), 15 IO23 (io), 16 EN, 17 VP, 18 VN, 19 IO34 (io), 20 IO35 (io), 21 IO32 (io), 22 IO33 (io), 23 IO25 (io), 24 IO26 (io), 25 IO27 (io), 26 IO14 (io), 27 IO12 (io), 28 IO13 (io), 29 GND1, 30 VIN

## ESP32 dev kit - mc
designator ?, comment CI?
MICROCONTROLADOR
pins: 1 3V3, 2 GND, 3 IO15, 4 IO2, 5 IO4, 6 IO16/RST, 7 IO17/DC, 8 IO5/CS, 9 IO18/SCLK, 10 IO19/MISO, 11 IO21/SDA, 12 IO3/RX0, 13 IO1/TX0, 14 IO22/SCL, 15 IO23/MOSI, 16 EN, 17 IO36/INT, 18 IO39, 19 IO34/QEA, 20 IO35/QEB, 21 IO32/PRST, 22 IO33/INDX, 23 IO25, 24 IO26, 25 IO27/TST, 26 IO14/SCLK, 27 IO12/MISO, 28 IO13/MOSI, 29 GND1, 30 VIN

## ESP32-PICO-MINI
designator CI?, comment ESP32-PICO-MINI-02U
pins: 1 GND, 2 GND, 3 3V3, 4 I36, 5 I37, 6 I38, 7 I39, 8 EN, 9 I34, 10 I35, 11 GND, 12 IO32, 13 IO33, 14 GND, 15 IO25, 16 IO26, 17 IO27, 18 IO14, 19 IO12, 20 IO13, 21 IO15, 22 IO2, 23 IO0, 24 IO4, 25 NC, 26 IO20, 27 IO7, 28 IO8, 29 IO5, 30 RXD0, 31 TXD0, 32 NC, 33 IO19, 34 IO22, 35 IO21, 36 GND, 37 GND, 38 GND, 39 GND, 40 GND, 41 GND, 42 GND, 43 GND, 44 GND, 45 GND, 46 GND, 47 GND, 48 GND, 49 GND, 50 GND, 51 GND, 52 GND, 53 GND

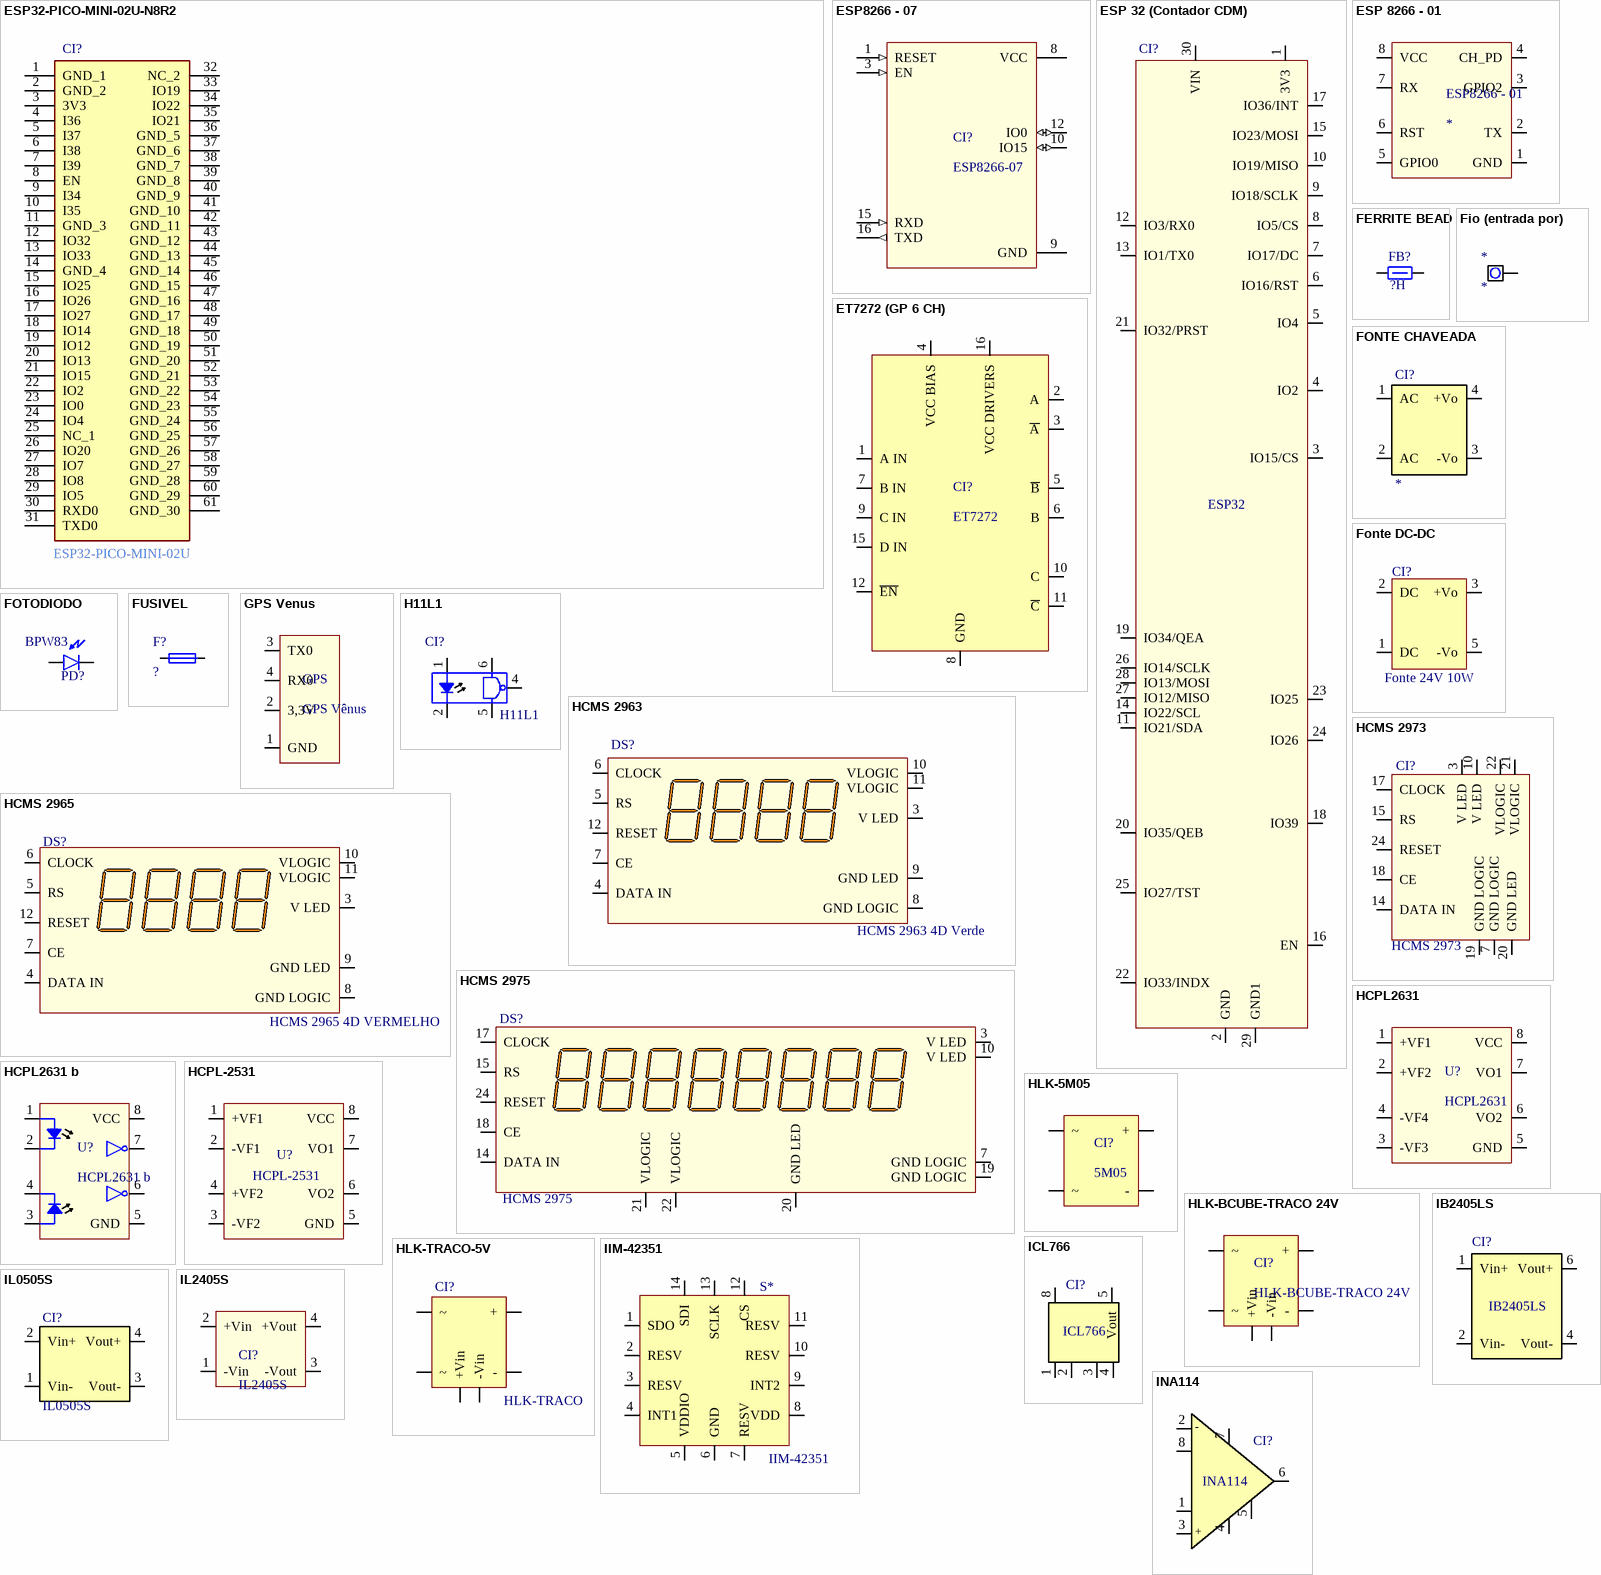
[diagram p13: symbols ESP32-PICO-MINI-02U-N8R2 to INA114]

## ESP32-PICO-MINI-02U-N8R2
designator CI?
Multiprotocol Modules SMD module, ESP32-PICO-V3-02 with 8 MB flash and 2 MB PSRAM die inside, ESP32 ECO V3, IPEX antenna
footprint ESP32PICOMINI02UN8R2
pins: 1 GND_1, 2 GND_2, 3 3V3, 4 I36, 5 I37, 6 I38, 7 I39, 8 EN, 9 I34, 10 I35, 11 GND_3, 12 IO32, 13 IO33, 14 GND_4, 15 IO25, 16 IO26, 17 IO27, 18 IO14, 19 IO12, 20 IO13, 21 IO15, 22 IO2, 23 IO0, 24 IO4, 25 NC_1, 26 IO20, 27 IO7, 28 IO8, 29 IO5, 30 RXD0, 31 TXD0, 32 NC_2, 33 IO19, 34 IO22, 35 IO21, 36 GND_5, 37 GND_6, 38 GND_7, 39 GND_8, 40 GND_9, 41 GND_10, 42 GND_11, 43 GND_12, 44 GND_13, 45 GND_14, 46 GND_15, 47 GND_16, 48 GND_17, 49 GND_18, 50 GND_19, 51 GND_20, 52 GND_21, 53 GND_22, 54 GND_23, 55 GND_24, 56 GND_25, 57 GND_26, 58 GND_27, 59 GND_28, 60 GND_29, 61 GND_30
text: ESP32-PICO-MINI-02U

## ESP8266 - 07
designator CI?, comment ESP8266-07
MICROCONTROLADOR; Modelo: ESP8266-07
pins: 1 RESET (in), 3 EN (in), 8 VCC (power), 9 GND (power), 10 IO15 (io), 12 IO0 (io), 15 RXD (in), 16 TXD (out)

## ESP 32 (Contador CDM)
designator CI?, comment ESP32
Espressif
footprint ESP32-DEVKITV1_BOARD
pins: 1 3V3, 2 GND, 3 IO15/CS, 4 IO2, 5 IO4, 6  IO16/RST, 7 IO17/DC, 8 IO5/CS, 9 IO18/SCLK, 10 IO19/MISO, 11 IO21/SDA, 12 IO3/RX0, 13 IO1/TX0, 14 IO22/SCL, 15 IO23/MOSI, 16 EN, 17 IO36/INT, 18 IO39, 19 IO34/QEA, 20 IO35/QEB, 21 IO32/PRST, 22 IO33/INDX, 23 IO25, 24 IO26, 25 IO27/TST, 26 IO14/SCLK, 27 IO12/MISO, 28 IO13/MOSI, 29 GND1, 30 VIN

## ESP 8266 - 01
designator ESP8266 - 01
Módulo ESP8266 01
footprint ESP 8266-01
pins: 1 GND, 2 TX, 3 GPIO2, 4 CH_PD, 5 GPIO0, 6 RST, 7 RX, 8 VCC

## ET7272 (GP 6 CH)
designator CI?, comment ET7272
DISPLAY; Modelo: ET7272
pins: 1 A IN, 2 A, 3 ~{A}, 4 VCC BIAS, 5 ~{B}, 6 B, 7 B IN, 8 GND, 9 C IN, 10 C, 11 ~{C}, 12 ~{EN}, 15 D IN, 16 VCC DRIVERS

## FERRITE BEAD
designator FB?, comment ?H
INDUTOR; Modelo: SMD; Codigo: MH3261-501Y; Value: ?H
footprint IND 1206
pins: 1, 2

## Fio (entrada por)
designator *
CONECTOR
footprint Fio (entrada por)
pins: 1

## FONTE CHAVEADA
designator CI?
CONVERSOR AC-DC
pins: 1 AC, 2 AC, 3 -Vo, 4 +Vo

## Fonte DC-DC
designator CI?, comment Fonte 24V 10W
CONVERSOR DC-DC; Modelo: Fonte 24V 10W
pins: 1 DC, 2 DC, 3 +Vo, 5 -Vo

## FOTODIODO
designator PD?, comment BPW83
Fotodiodo PIN
footprint Fotodiodo BPW83
pins: A, K

## FUSIVEL
designator F?, comment ?
FUSÍVEL
footprint Soquete Fuse 2AG
pins: 1, 2

## GPS Venus
designator GPS, comment GPS Vênus
Placa GPS Venus GPS-11058
footprint GPS Venus
pins: 1 GND, 2 3,3V, 3 TX0, 4 RX0

## H11L1
designator CI?
ACOPLADOR OPTICO
footprint DIP6
pins: 1 A "Anode", 2 K "Cathode", 4 "Collector", 5 "Emitter", 6 "Emitter"

## HCMS 2963
designator DS?, comment HCMS 2963 4D Verde
DISPLAY
footprint HCMS-2963
pins: 3 V LED, 4 DATA IN, 5 RS, 6 CLOCK, 7 CE, 8 GND LOGIC, 9 GND LED, 10 VLOGIC, 11 VLOGIC, 12 RESET

## HCMS 2965
designator DS?, comment HCMS 2965 4D VERMELHO
DISPLAY
footprint HCMS-296X
pins: 3 V LED, 4 DATA IN, 5 RS, 6 CLOCK, 7 CE, 8 GND LOGIC, 9 GND LED, 10 VLOGIC, 11 VLOGIC, 12 RESET

## HCMS 2973
designator CI?
DISPLAY; Modelo: HCMS 2973
pins: 3 V LED, 7 GND LOGIC, 10 V LED, 14 DATA IN, 15 RS, 17 CLOCK, 18 CE, 19 GND LOGIC, 20 GND LED, 21 VLOGIC, 22 VLOGIC, 24 RESET

## HCMS 2975
designator DS?
DISPLAY
footprint HCMS-2975
pins: 3 V LED, 7 GND LOGIC, 10 V LED, 14 DATA IN, 15 RS, 17 CLOCK, 18 CE, 19 GND LOGIC, 20 GND LED, 21 VLOGIC, 22 VLOGIC, 24 RESET

## HCPL2631
designator U?
ACOPLADOR OPTICO
footprint SOIC 8
pins: 1 +VF1, 2 +VF2, 3 -VF3, 4 -VF4, 5 GND, 6 VO2, 7 VO1, 8 VCC

## HCPL2631 b
designator U?
ACOPLADOR OPTICO
footprint SOIC 8
pins: 1 +VF1, 2 +VF2, 3 -VF3, 4 -VF4, 5 GND, 6 VO2, 7 VO1, 8 VCC

## HCPL-2531
designator U?
pins: 1 +VF1, 2 -VF1, 3 -VF2, 4 +VF2, 5 GND, 6 VO2, 7 VO1, 8 VCC

## HLK-5M05
designator CI?, comment 5M05
Fonte Hi-Link 5 Vdc 5W
pins: 1 ~, 2 ~, 3 -, 4 +

## HLK-BCUBE-TRACO 24V
designator CI?
Hi-Link/Blue Cube/ Traco
footprint Fonte 24V Adaptada (Fonte Blue Cube/Hi-Link/Traco)
pins: 1 ~, 2 ~, 5 -Vin, 6 +Vin, 15 -, 16 +

## HLK-TRACO-5V
designator CI?, comment HLK-TRACO
CONVERSOR DC-DC; Modelo: HLK-TRACO-5V
footprint FONTE 5V ADAPTADA
pins: 1 ~, 2 ~, 5 -Vin, 6 +Vin, 15 -, 16 +

## IB2405LS
designator CI?
ISOLADOR DIGITAL; Modelo: IB2405LS
pins: 1 Vin+, 2 Vin-, 4 Vout-, 6 Vout+

## ICL766
designator CI?
REGULADOR DE TENSÃO; Modelo: ICL766
footprint SOIC 8
pins: 1, 2, 3, 4, 5 Vout, 8

## IIM-42351
designator S*
CONVERSOR DE CORRENTE; Modelo: IIM-42351
pins: 1 SDO, 2 RESV, 3 RESV, 4 INT1, 5 VDDIO, 6 GND, 7 RESV, 8 VDD, 9 INT2, 10 RESV, 11 RESV, 12 CS, 13 SCLK, 14 SDI

## IL0505S
designator CI?
ISOLADOR DE SINAL DIGITAL; Modelo: IL0505S
footprint IL0505S
pins: 1 Vin-, 2 Vin+, 3 Vout-, 4 Vout+

## IL2405S
designator CI?
Conversor DC/DC
footprint IL SERIES
pins: 1 -Vin, 2 +Vin, 3 -Vout, 4 +Vout

## INA114
designator CI?
AMPLIFICADOR OPERACIONAL
footprint DIP8
pins: 1 RG, 2 -, 3 +, 4 -, 5 REF, 6 Vo, 7 V+, 8 Rg

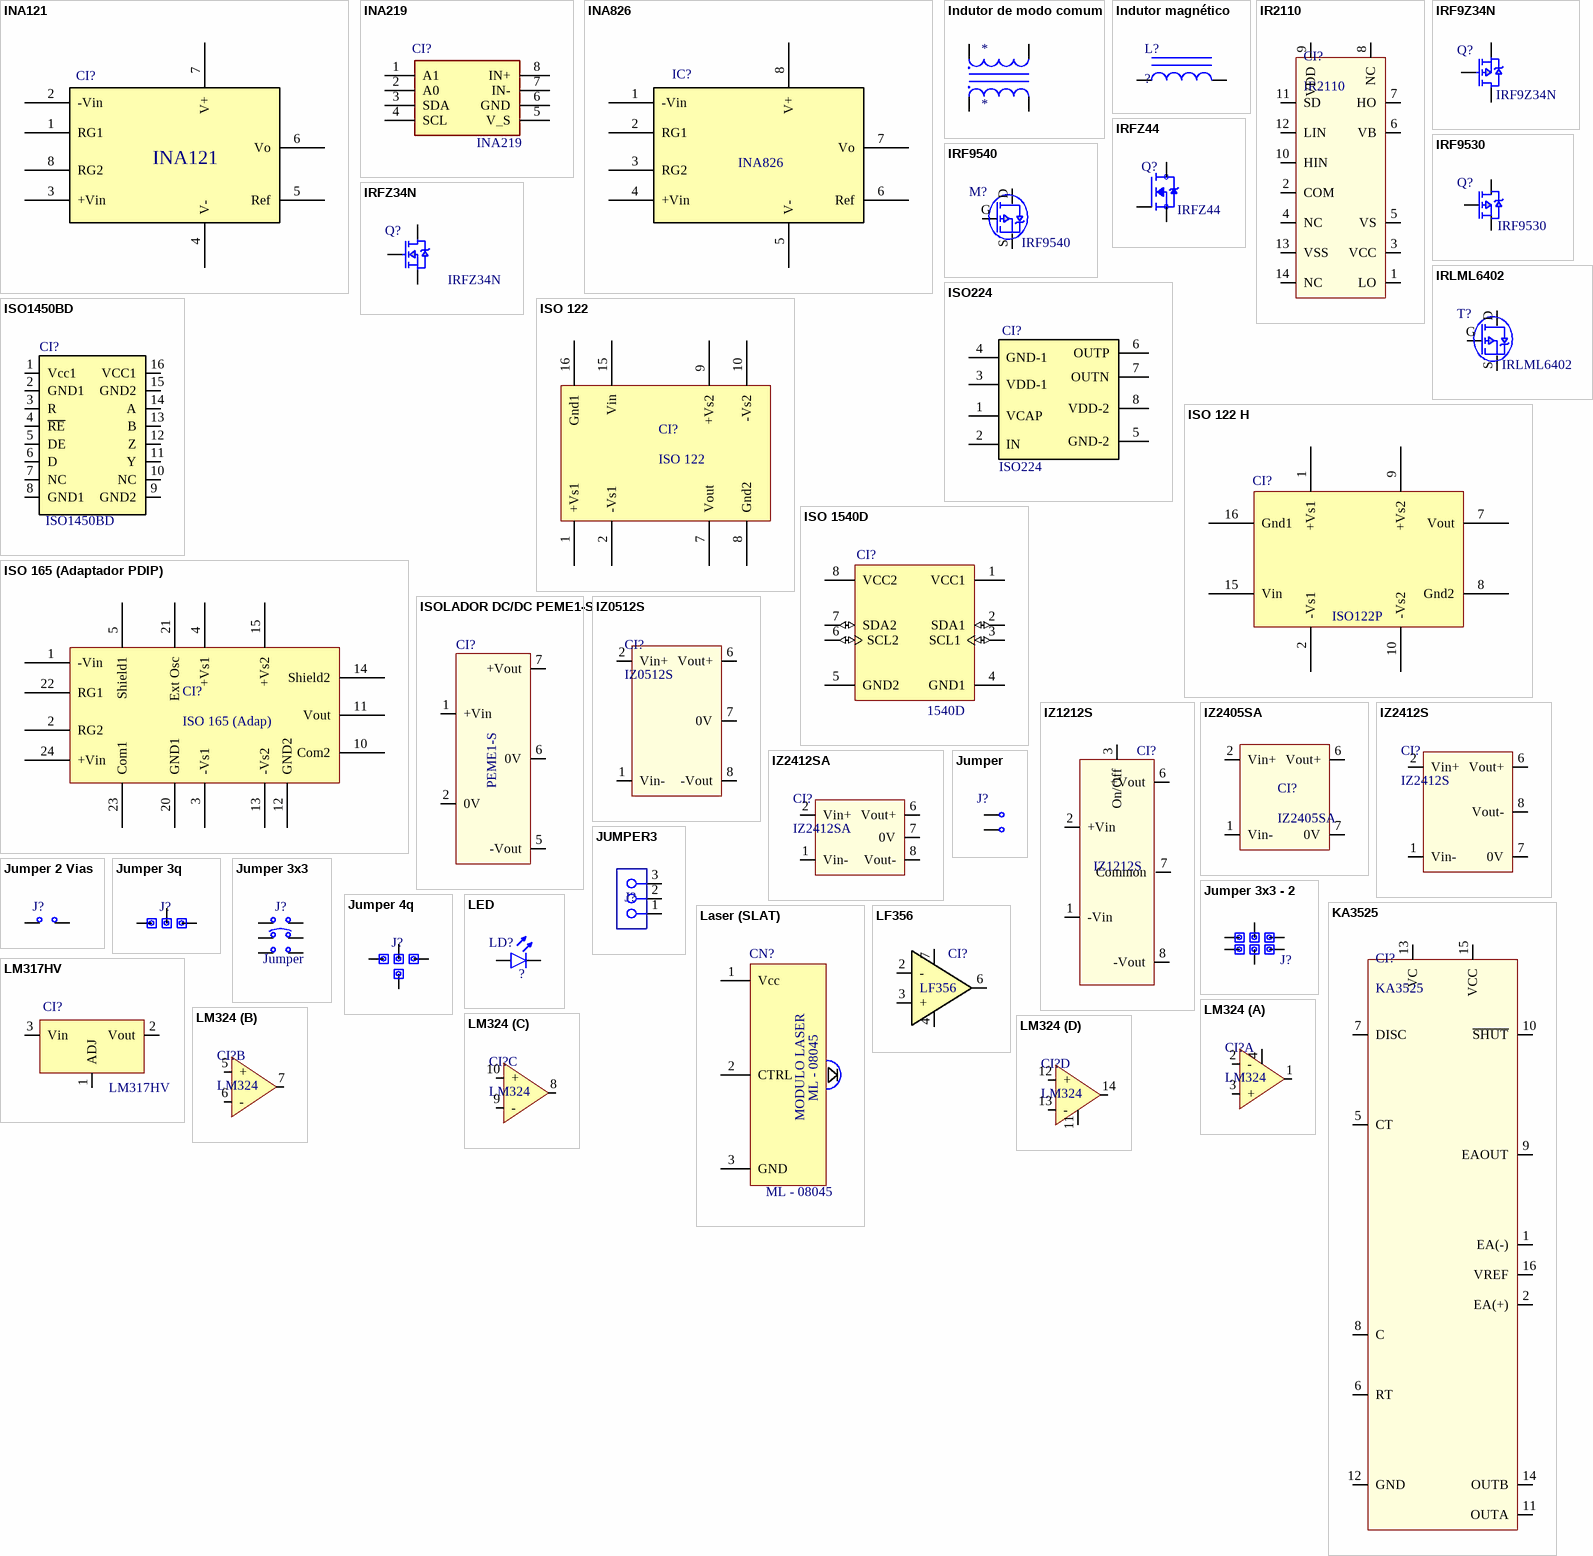
[diagram p14: symbols INA121 to LM324]

## INA121
designator CI?
AMPLIFICADOR OPERACIONAL
footprint SOIC 8
pins: 1 RG1, 2 -Vin, 3 +Vin, 4 V-, 5 Ref, 6 Vo, 7 V+, 8 RG2

## INA219
designator CI?
Sensor de monitoramento de corrente e potência; Codigo: INA219BIDR
footprint SOIC 8
pins: 1 A1, 2 A0, 3 SDA, 4 SCL, 5 V_S, 6 GND, 7 IN-, 8 IN+

## INA826
designator IC?
pins: 1 -Vin, 2 RG1, 3 RG2, 4 +Vin, 5 V-, 6 Ref, 7 Vo, 8 V+

## Indutor de modo comum
designator *
AJUDA
pins: 1, 2, 3, 4

## Indutor magnético
designator L?, comment ?
Indutor magnético
pins: 1, 2

## IR2110
designator CI?
Circuito Integrado
footprint DIP14
pins: 1 LO, 2 COM, 3 VCC, 4 NC, 5 VS, 6 VB, 7 HO, 8 NC, 9 VDD, 10 HIN, 11 SD, 12 LIN, 13 VSS, 14 NC

## IRF9Z34N
designator Q?
TRANSISTOR MOSFET; Modelo: PTH; ENCAP: TO-220
footprint TO-220AB-3 Deit - FET
pins: D, G, S

## IRF9530
designator Q?
TRANSISTOR POWER MOSFET; Modelo: PTH; ENCAP: TO-3
footprint IRF9530
pins: D, G, S

## IRF9540
designator M?
TRANSISTOR POWER MOSFET; Modelo: PTH; ENCAP: TO-220
footprint TO-220AB
pins: D, G, S

## IRFZ34N
designator Q?
TRANSISTOR MOSFET; Modelo: PTH; ENCAP: TO-220
footprint TO-220AB-3 Deit - FET
pins: D, G, S

## IRFZ44
designator Q?
Transistor MOSFET; Codigo: IRFZ44NSTRLPBF
footprint D2PAK-3
pins: 1 G, 2 D, 3 S

## IRLML6402
designator T?
TRANSISTOR MOSFET; Modelo: SMD; ENCAP: SOT-23
footprint SOT-23 GSD
pins: D, G, S

## ISO224
designator CI?
ISOLADOR DIGITAL; Modelo: ISO224
footprint ISO224 SMD
pins: 1 VCAP, 2 IN, 3 VDD-1, 4 GND-1, 5 GND-2, 6 OUTP, 7 OUTN, 8 VDD-2

## ISO1450BD
designator CI?
ISOLADOR DIGITAL; Modelo: ISO1450BD
footprint SOIC 16WD
pins: 1 Vcc1, 2 GND1, 3 R, 4 ~{RE}, 5 DE, 6 D, 7 NC, 8 GND1, 9 GND2, 10 NC, 11 Y, 12 Z, 13 B, 14 A, 15 GND2, 16 VCC1

## ISO 122
designator CI?
Isolador Amplificador
footprint ISO 122
pins: 1 +Vs1, 2 -Vs1, 7 Vout, 8 Gnd2, 9 +Vs2, 10 -Vs2, 15 Vin, 16 Gnd1

## ISO 122 H
designator CI?, comment ISO122P
ISOLADOR DE SINAL ANALOGICO; Modelo: ISO122P
footprint ISO 122
pins: 1 +Vs1, 2 -Vs1, 7 Vout, 8 Gnd2, 9 +Vs2, 10 -Vs2, 15 Vin, 16 Gnd1

## ISO 165 (Adaptador PDIP)
designator CI?, comment ISO 165 (Adap)
footprint ISO 165 (ADAP)
pins: 1 -Vin, 2 RG2, 3 -Vs1, 4 +Vs1, 5 Shield1, 10 Com2, 11 Vout, 12 GND2, 13 -Vs2, 14 Shield2, 15 +Vs2, 20 GND1, 21 Ext Osc, 22 RG1, 23 Com1, 24 +Vin

## ISO 1540D
designator CI?, comment 1540D
TRANSISTOR DE POTÊNCIA; Modelo: 1540D
footprint ISO1540D
pins: 1 VCC1 (power), 2 SDA1 (io), 3 SCL1 (io), 4 GND1 (power), 5 GND2 (power), 6 SCL2 (io), 7 SDA2 (io), 8 VCC2 (power)

## ISOLADOR DC/DC PEME1-S
designator CI?, comment PEME1-S
ISOLADOR DC
footprint ISOLADOR DC/DC 3KV PEME
pins: 1 +Vin, 2 0V, 5 -Vout, 6 0V, 7 +Vout

## IZ0512S
designator CI?
Conversor DC/DC
footprint IZ2412S
pins: 1 Vin-, 2 Vin+, 6 Vout+, 7 0V, 8 -Vout

## IZ1212S
designator CI?
Conversor DC/DC
footprint IZ2412S
pins: 1 -Vin, 2 +Vin, 3 On/Off, 6 +Vout, 7 Common, 8 -Vout

## IZ2405SA
designator CI?
Conversor DC/DC
footprint IZ2412S
pins: 1 Vin-, 2 Vin+, 6 Vout+, 7 0V

## IZ2412S
designator CI?
Conversor DC/DC
footprint IZ2412S
pins: 1 Vin-, 2 Vin+, 6 Vout+, 7 0V, 8 Vout-

## IZ2412SA
designator CI?
Conversor DC/DC
footprint IZ2412S
pins: 1 Vin-, 2 Vin+, 6 Vout+, 7 0V, 8 Vout-

## Jumper
designator J?  (value not drawn)
footprint JUMPER_2VIAS
pins: 1, 2

## JUMPER3
designator J?  (value not drawn)
JUMPER
pins: 1, 2, 3

## Jumper 2 Vias
designator J?
JUMPER
footprint JUMPER 2 VIAS PTH (Barra de Pinos Simpls 1x2)
footprint JUMPER 2 VIAS SMD
pins: 1, 2

## Jumper 3q
designator J?, comment Jumper de 3 pinos  (value not drawn)
JUMPER
footprint JUMPER_3VIAS
pins: 1, 2, 3

## Jumper 3x3
designator J?, comment Jumper
footprint Jumper 3x3
pins: 1, 2, 3, 4, 5, 6

## Jumper 3x3 - 2
designator J?, comment ?  (value not drawn)
JUMPER
pins: 1, 2, 3, 4, 5, 6

## Jumper 4q
designator J?, comment Jumper 4 pinos  (value not drawn)
JUMPER
pins: 1, 2, 3, 4

## KA3525
designator CI?
Circuito Integrado PWM
footprint DIP16
pins: 1 EA(-), 2 EA(+), 5 CT, 6 RT, 7 DISC, 8 C, 9 EAOUT, 10 ~{SHUT}, 11 OUTA, 12 GND, 13 VC, 14 OUTB, 15 VCC, 16 VREF

## Laser (SLAT)
designator CN?, comment ML - 08045
MODULO LASER; Modelo: ML - 08045
pins: 1 Vcc, 2 CTRL, 3 GND

## LED
designator LD?, comment ?
LED
footprint LED 3MM - BLUE
footprint LED 3MM - GREEN
footprint LED 3MM - RED
footprint LED 3MM - RED V
footprint LED 3MM - YELLOW
footprint LED 3MM - GREEN V
footprint LED 5MM - BLUE
footprint LED 5MM - GREEN
footprint LED 5MM - ORANGE
footprint LED 5MM - RED
footprint LED 5mm - RED  V
footprint LED 5MM - WHITE
footprint LED 5MM - YELLOW
footprint LED RET -  RED
footprint LED SMD 0603 - GREEN
pins: A, K

## LF356
designator CI?
AMPLIFICADOR OPERACIONAL
footprint DIP8
pins: 2 -, 3 +, 4 -Vcc, 6 output, 7 +Vcc

## LM317HV
designator CI?
Regulador Ajustável até 60V Diferencia
footprint LM317
pins: 1 ADJ, 2 Vout, 3 Vin

## LM324
designator CI?
Circuito integrado
footprint DIP14
part A pins: 1, 2 -, 3 +, 4
part B pins: 5 +, 6 -, 7
part C pins: 8, 9 -, 10 +
part D pins: 11, 12 +, 13 -, 14

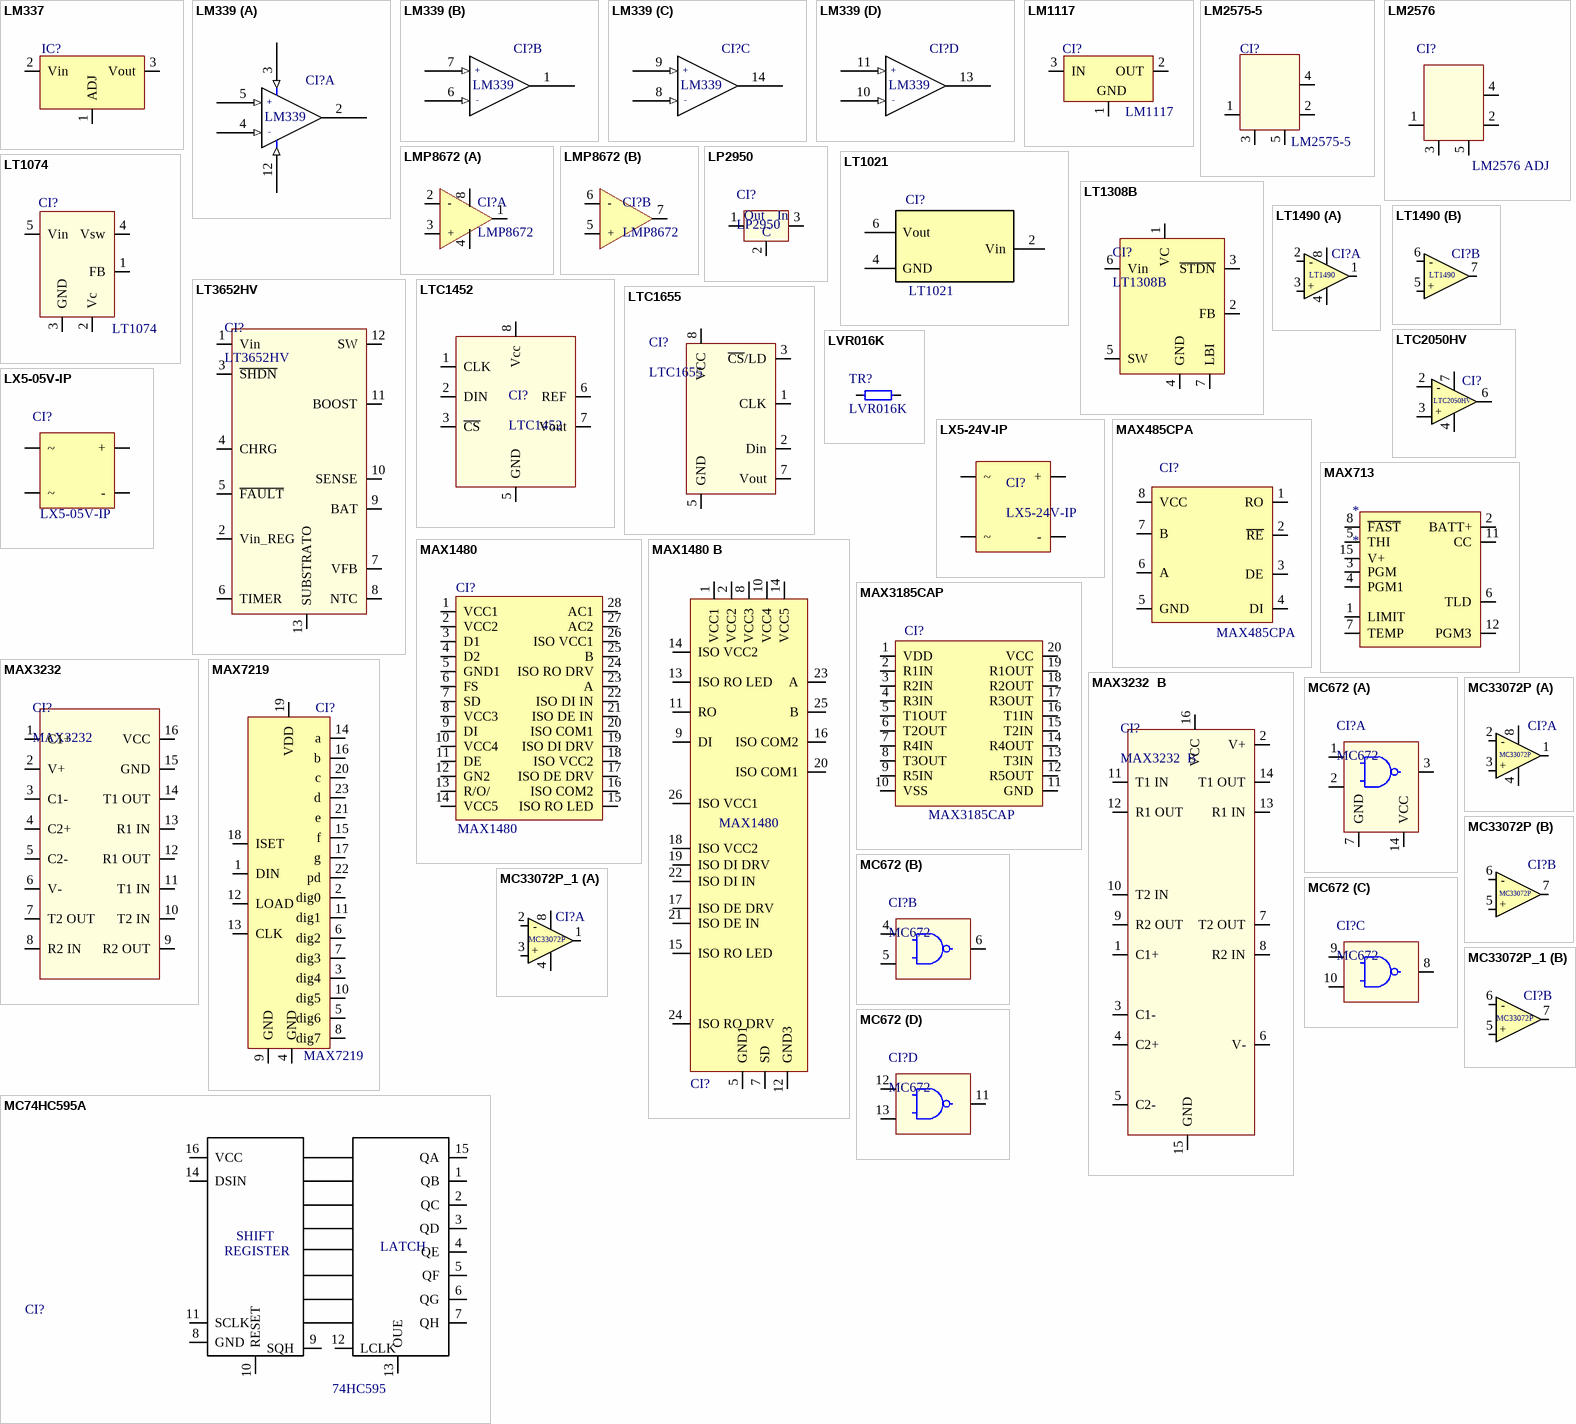
[diagram p15: symbols LM337 to MC33072P_1]

## LM337
designator IC?
Regulador ajustável  de Tensão Negativa Linear
footprint LM317
pins: 1 ADJ, 2 Vin, 3 Vout

## LM339
designator CI?
COMPARADOR DE TENSÃO; Modelo: LM339
footprint DIP14
part A pins: 2 OUTPUT (oc), 3 PLUS V (in), 4 MINUS INPUT (in), 5 PLUS INPUT (in), 12 MINUS V (in)
part B pins: 1 OUTPUT (oc), 6 MINUS INPUT (in), 7 PLUS INPUT (in)
part C pins: 8 MINUS INPUT (in), 9 PLUS INPUT (in), 14 OUTPUT (oc)
part D pins: 10 MINUS INPUT (in), 11 PLUS INPUT (in), 13 OUTPUT (oc)
part A text: +; -
part B text: +; -
part C text: +; -
part D text: +; -

## LM1117
designator CI?
Regulador linear de tensão de baixa perda
footprint SOT223 2C4
pins: 1 GND, 2 OUT, 3 IN

## LM2575-5
designator CI?
Regulador de tensão
footprint DDPAK-5
footprint TO-220-5
footprint TO-220-5 deit
pins: 1, 2, 3, 4, 5

## LM2576
designator CI?, comment LM2576 ADJ
Regulador de tensão
footprint TO-263 deit
footprint TO-263
footprint DDPAK-5
pins: 1, 2, 3, 4, 5

## LMP8672
designator CI?
Circuito Integrado
part A pins: 1, 2, 3, 4, 8
part B pins: 5, 6, 7
part A text: -; +
part B text: -; +

## LP2950
designator CI?
Interface Isolada de dados RS485
footprint TO-92
pins: 1 Out, 2 C, 3 In

## LT1021
designator CI?
footprint DIP8
pins: 2 Vin, 4 GND, 6 Vout

## LT1074
designator CI?
Regulador Ajustável 5A
pins: 1 FB, 2 Vc, 3 GND, 4 Vsw, 5 Vin

## LT1308B
designator CI?
Circuito Integrado
footprint 8-Lead P Small
pins: 1 VC, 2 FB, 3 ~{STDN}, 4 GND, 5 SW, 6 Vin, 7 LBI

## LT1490
designator CI?
AMPLIFICADOR OPERACIONAL
footprint DIP8
part A pins: 1, 2, 3, 4, 8
part B pins: 5, 6, 7
part A text: -; +
part B text: -; +

## LT3652HV
designator CI?
CONTROLADOR DE CARGA DE BATERIA; Modelo: LT3652HV
footprint MSOP-12
pins: 1 Vin, 2 Vin_REG, 3 ~{SHDN}, 4 CHRG, 5 ~{FAULT}, 6 TIMER, 7 VFB, 8 NTC, 9 BAT, 10 SENSE, 11 BOOST, 12 SW, 13 SUBSTRATO

## LTC1452
designator CI?
Conversor Digital Analógico
footprint DIP8
pins: 1 CLK, 2 DIN, 3 ~{CS}, 5 GND, 6 REF, 7 Vout, 8 Vcc

## LTC1655
designator CI?
Conversor Digital Analógico 16bit
footprint 8-Lead P Small
pins: 1 CLK, 2 Din, 3 ~{CS}/LD, 5 GND, 7 Vout, 8 VCC

## LTC2050HV
designator CI?
AMPLIFICADOR OPERACIONAL
pins: 2, 3, 4, 6, 7
text: -; +

## LVR016K
designator TR?
POTENCIOMETRO; Modelo: LVR016K
pins: 1, 2

## LX5-05V-IP
designator CI?
Fonte Chaveada 5V/1A
footprint LX5-05V-IP
pins: 1 ~, 2 ~, 3 -, 4 +

## LX5-24V-IP
designator CI?
Fonte Chaveada 24V/0.2A
footprint LX5-24V-IP
pins: 1 ~, 2 ~, 3 -, 4 +

## MAX485CPA
designator CI?
CONVERSOR
footprint DIP8
pins: 1 RO, 2 ~{RE}, 3 DE, 4 DI, 5 GND, 6 A, 7 B, 8 VCC

## MAX713
designator *
CONTROLADOR DE CARGA DE BATERIA
footprint DIP16
pins: 1 LIMIT, 2 BATT+, 3 PGM, 4 PGM1, 5 THI, 6 TLD, 7 TEMP, 8 ~{FAST}, 11 CC, 12 PGM3, 15 V+

## MAX1480
designator CI?
CONVERSOR; Modelo: MAX1480
footprint DIP28-600
pins: 1 VCC1, 2 VCC2, 3 D1, 4 D2, 5 GND1, 6 FS, 7 SD, 8 VCC3, 9 DI, 10 VCC4, 11 DE, 12 GN2, 13 R/O/, 14 VCC5, 15 ISO RO LED, 16 ISO COM2, 17 ISO DE DRV, 18 ISO VCC2, 19 ISO DI DRV, 20 ISO COM1, 21 ISO DE IN, 22 ISO DI IN, 23 A, 24 ISO RO DRV, 25 B, 26 ISO VCC1, 27 AC2, 28 AC1

## MAX1480 B
designator CI?, comment MAX1480
CONVERSOR; Modelo: MAX1480
footprint DIP28-600
pins: 1 VCC1, 2 VCC2, 5 GND1, 7 SD, 8 VCC3, 9 DI, 10 VCC4, 11 RO, 12 GND3, 13 ISO RO LED, 14 VCC5, 14 ISO VCC2, 15 ISO RO LED, 16 ISO COM2, 17 ISO DE DRV, 18 ISO VCC2, 19 ISO DI DRV, 20 ISO COM1, 21 ISO DE IN, 22 ISO DI IN, 23 A, 24 ISO RO DRV, 25 B, 26 ISO VCC1

## MAX3185CAP
designator CI?
CONVERSOR; Modelo: MAX3185CAP
footprint SSOP20
pins: 1 VDD, 2 R1IN, 3 R2IN, 4 R3IN, 5 T1OUT, 6 T2OUT, 7 R4IN, 8 T3OUT, 9 R5IN, 10 VSS, 11 GND, 12 R5OUT, 13 T3IN, 14 R4OUT, 15 T2IN, 16 T1IN, 17 R3OUT, 18 R2OUT, 19 R1OUT, 20 VCC

## MAX3232
designator CI?
CONVERSOR
footprint SOIC NARROW
pins: 1 C1+, 2 V+, 3 C1-, 4 C2+, 5 C2-, 6 V-, 7 T2 OUT, 8 R2 IN, 9 R2 OUT, 10 T2 IN, 11 T1 IN, 12 R1 OUT, 13 R1 IN, 14 T1 OUT, 15 GND, 16 VCC

## MAX3232  B
designator CI?
CONVERSOR
footprint SOIC NARROW
pins: 1 C1+, 2 V+, 3 C1-, 4 C2+, 5 C2-, 6 V-, 7 T2 OUT, 8 R2 IN, 9 R2 OUT, 10 T2 IN, 11 T1 IN, 12 R1 OUT, 13 R1 IN, 14 T1 OUT, 15 GND, 16 VCC